# Altium schematic symbol library Ic%.SchLib: 452 symbols (part 8 of 12)
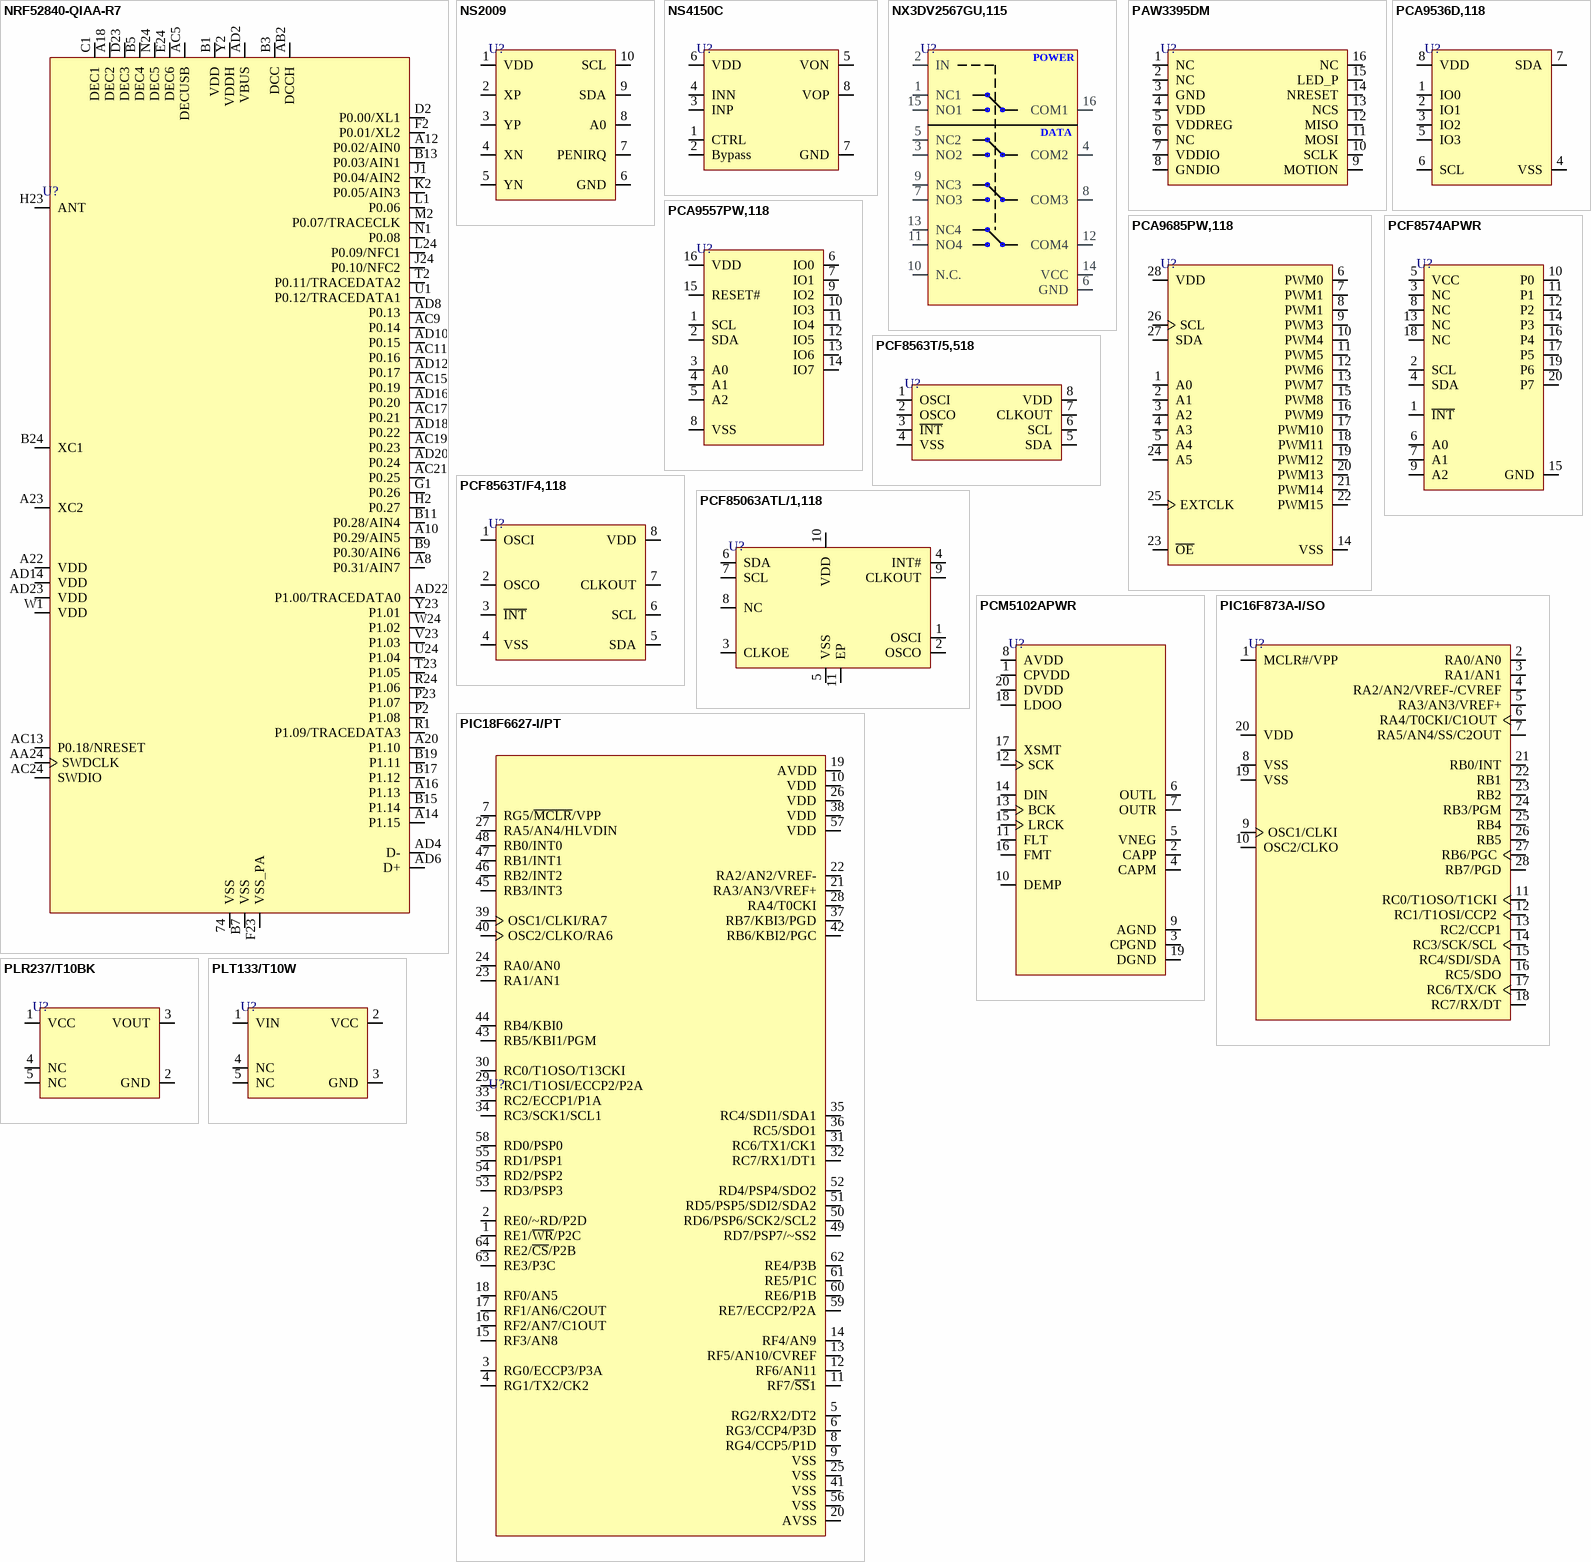
[diagram p30: symbols NRF52840-QIAA-R7 to PLT133/T10W]

## PIC18F6627-I/PT
designator U?
IC MCU 8BIT 96KB FLASH 64TQFP; Manufacturer: Microchip; Manufacturer Part Number: PIC18F6627-I/PT; Supplier: Digikey; Supplier Part Number: PIC18F6627-I/PT-ND; RoHS: Yes; Item Type: IC; Stock: 1660; Pricing: 1=11.3 (USD); ComponentLink1URL: https://datasheet.ciiva.com/7774/39646c-7774478.pdf?src-supplier=Element14; ComponentLink1Description: https://datasheet.ciiva.com/7774/39646c-7774478.pdf?src-supplier=Element14; ComponentLink2URL: https://datasheet.ciiva.com/7774/39646c-7774479.pdf?src-supplier=Element14; ComponentLink2Description: https://datasheet.ciiva.com/7774/39646c-7774479.pdf?src-supplier=Element14; ComponentLink3URL: https://datasheet.ciiva.com/9236/39646c-9236634.pdf?src-supplier=Avnet; ComponentLink3Description: https://datasheet.ciiva.com/9236/39646c-9236634.pdf?src-supplier=Avnet; ComponentLink4URL: https://datasheet.ciiva.com/6132/62310-6132869.pdf?src-supplier=Farnell; ComponentLink4Description: https://datasheet.ciiva.com/6132/62310-6132869.pdf?src-supplier=Farnell; ComponentLink5URL: https://datasheet.ciiva.com/6132/652299-6132870.pdf?src-supplier=Farnell; ComponentLink5Description: https://datasheet.ciiva.com/6132/652299-6132870.pdf?src-supplier=Farnell; ComponentLink6URL: https://datasheet.ciiva.com/41453/001084362-da-01-en-ic-pic-mcu-f-pic18f6627-i-pt-tqfp-64-mcp-41453830.pdf?src-supplier=Conrad; ComponentLink6Description: https://datasheet.ciiva.com/41453/001084362-da-01-en-ic-pic-mcu-f-pic18f6627-i-pt-tqfp-64-mcp-41453830.pdf?src-supplier=Conrad
footprint 64-TQFP (10x10)
pins: 1 RE1/~{WR}/P2C, 2 RE0/~RD/P2D, 3 RG0/ECCP3/P3A, 4 RG1/TX2/CK2, 5 RG2/RX2/DT2, 6 RG3/CCP4/P3D, 7 RG5/~{MCLR}/VPP, 8 RG4/CCP5/P1D, 9 VSS, 10 VDD, 11 RF7/~{SS}1, 12 RF6/AN11, 13 RF5/AN10/CVREF, 14 RF4/AN9, 15 RF3/AN8, 16 RF2/AN7/C1OUT, 17 RF1/AN6/C2OUT, 18 RF0/AN5, 19 AVDD, 20 AVSS, 21 RA3/AN3/VREF+, 22 RA2/AN2/VREF-, 23 RA1/AN1, 24 RA0/AN0, 25 VSS, 26 VDD, 27 RA5/AN4/HLVDIN, 28 RA4/T0CKI, 29 RC1/T1OSI/ECCP2/P2A, 30 RC0/T1OSO/T13CKI, 31 RC6/TX1/CK1, 32 RC7/RX1/DT1, 33 RC2/ECCP1/P1A, 34 RC3/SCK1/SCL1, 35 RC4/SDI1/SDA1, 36 RC5/SDO1, 37 RB7/KBI3/PGD, 38 VDD, 39 OSC1/CLKI/RA7, 40 OSC2/CLKO/RA6, 41 VSS, 42 RB6/KBI2/PGC, 43 RB5/KBI1/PGM, 44 RB4/KBI0, 45 RB3/INT3, 46 RB2/INT2, 47 RB1/INT1, 48 RB0/INT0, 49 RD7/PSP7/~SS2, 50 RD6/PSP6/SCK2/SCL2, 51 RD5/PSP5/SDI2/SDA2, 52 RD4/PSP4/SDO2, 53 RD3/PSP3, 54 RD2/PSP2, 55 RD1/PSP1, 56 VSS, 57 VDD, 58 RD0/PSP0, 59 RE7/ECCP2/P2A, 60 RE6/P1B, 61 RE5/P1C, 62 RE4/P3B, 63 RE3/P3C, 64 RE2/~{CS}/P2B

## PLR237/T10BK
designator U?
FIBER OPTIC RECEIVER IR; Manufacturer: Everlight; Manufacturer Part Number: PLR237/T10BK; Supplier: Digikey; Supplier Part Number: 1080-PLR237/T10BK-ND; RoHS: No; Item Type: FIBER OPTIC RECEIVER; Stock: 4654; Pricing: 1=3.86, 60=2.727, 120=2.2335, 540=1.88291, 1020=1.72708, 2040=1.65566, 5040=1.6232 (USD); LCSC Part Number: C17427482
footprint PLR237/T10BK
pins: 1 VCC, 2 GND, 3 VOUT, 4 NC, 5 NC

## PLT133/T10W
designator U?
TRANSMITTER FBR OPT IR PHOTOLINK; Manufacturer: Everlight; Manufacturer Part Number: PLT133/T10W; Item Type: IC; Data Rate: 16Mbps; Operating Supply Voltage: 5V; Wavelength: 660nm; Supply Current: 3mA; Supplier: Digikey; Supplier Part Number: 1080-1430-ND; RoHS: Yes; Stock: 13385; Pricing: 1=3.09, 60=2.0575, 120=1.58333, 540=1.4313, 1020=1.23002, 2040=1.16293, 5040=1.13609 (USD); Min Operating Temperature: -20°C; Max Operating Temperature: 70°C; Package Quantity: 500; Series: -; Lead Free: Lead Free; RoHS Compliant: Yes; ComponentLink1URL: http://components.arrow.com/part/dataview/47954421S9333883N2104?src-supplier=Arrow+Electronics; ComponentLink1Description: http://components.arrow.com/part/dataview/47954421S9333883N2104?src-supplier=Arrow+Electronics; ComponentLink2URL: http://www.everlight.com/file/ProductFile/PLT133-T10W.pdf?src-supplier=Digikey; ComponentLink2Description: http://www.everlight.com/file/ProductFile/PLT133-T10W.pdf?src-supplier=Digikey; ComponentLink3URL: http://www.everlight.com/index.php?option=com_k2&view=item&id=271:transmitter-plt-module&Itemid=264&lang=en&src-supplier=Mouser; ComponentLink3Description: http://www.everlight.com/index.php?option=com_k2&view=item&id=271:transmitter-plt-module&Itemid=264&lang=en&src-supplier=Mouser; ComponentLink4URL: http://www.everlight.com/datasheets/PLT133_T9_datasheet.pdf?src-supplier=Future+Electronics; ComponentLink4Description: http://www.everlight.com/datasheets/PLT133_T9_datasheet.pdf?src-supplier=Future+Electronics; LCSC Part Number: C2940206
footprint PLT133/T10W
pins: 1 VIN, 2 VCC, 3 GND, 4 NC, 5 NC

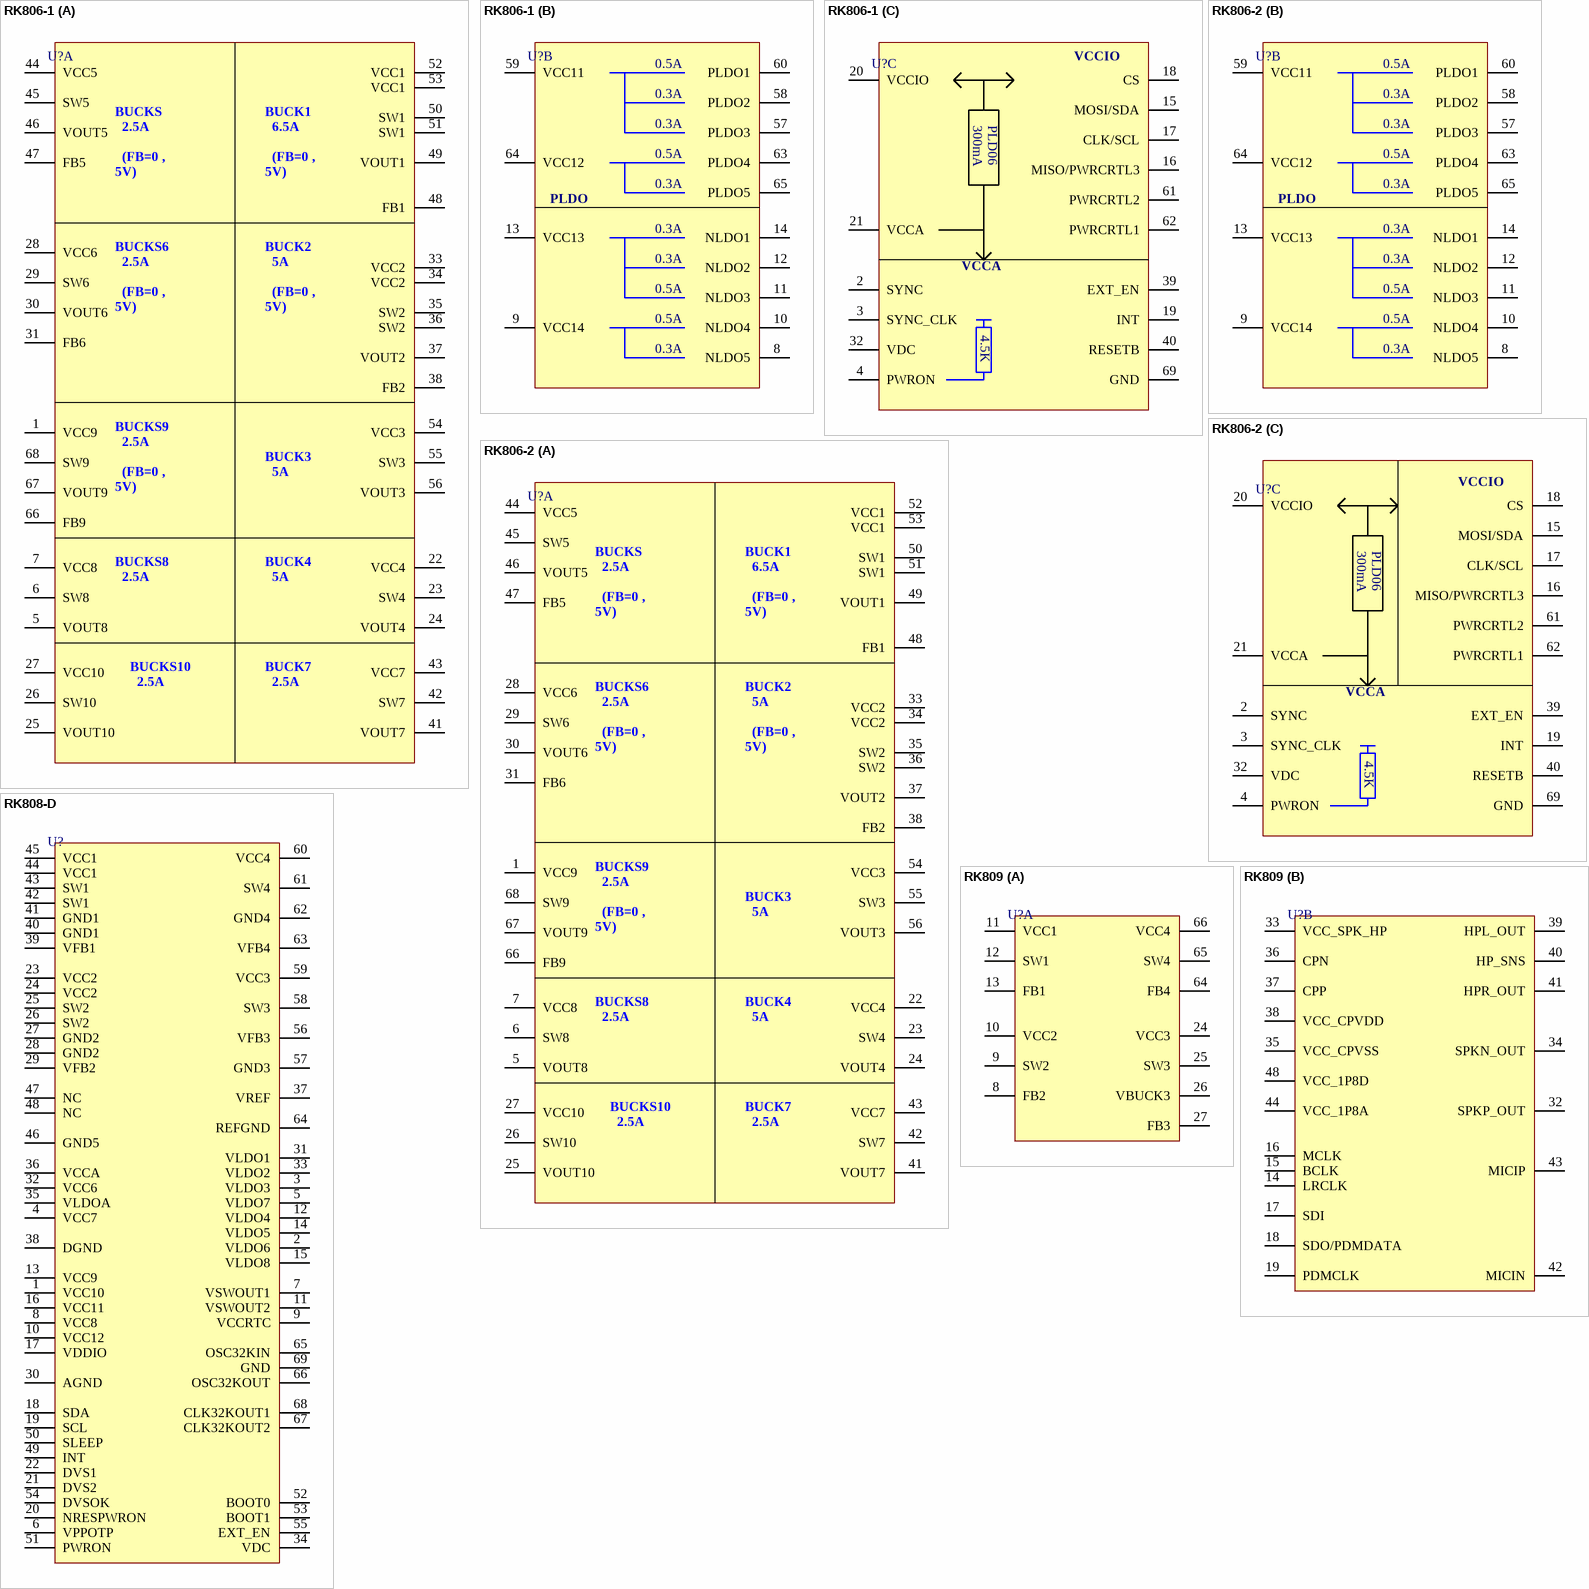
[diagram p15: symbols RK806-1 to RK809]

## RK806-1
designator U?
Power management integrated circuits; Manufacturer: ROCKCHIP; Manufacturer Part Number: RK806-1; Item Type: IC; Package: QFN68; LCSC Part Number: *; ComponentLink1Description: Rutronik; ComponentLink1URL: https://www.rutronik24.com/product/rockchip/rk806-1/17772765.html?emcs0=10&emcs1=null&emcs2=&emcs3=17772765
footprint 68-QFN-(7x7)
part A pins: 1 VCC9, 5 VOUT8, 6 SW8, 7 VCC8, 22 VCC4, 23 SW4, 24 VOUT4, 25 VOUT10, 26 SW10, 27 VCC10, 28 VCC6, 29 SW6, 30 VOUT6, 31 FB6, 33 VCC2, 34 VCC2, 35 SW2, 36 SW2, 37 VOUT2, 38 FB2, 41 VOUT7, 42 SW7, 43 VCC7, 44 VCC5, 45 SW5, 46 VOUT5, 47 FB5, 48 FB1, 49 VOUT1, 50 SW1, 51 SW1, 52 VCC1, 53 VCC1, 54 VCC3, 55 SW3, 56 VOUT3, 66 FB9, 67 VOUT9, 68 SW9
part B pins: 8 NLDO5, 9 VCC14, 10 NLDO4, 11 NLDO3, 12 NLDO2, 13 VCC13, 14 NLDO1, 57 PLDO3, 58 PLDO2, 59 VCC11, 60 PLDO1, 63 PLDO4, 64 VCC12, 65 PLDO5
part C pins: 2 SYNC, 3 SYNC_CLK, 4 PWRON, 15 MOSI/SDA, 16 MISO/PWRCRTL3, 17 CLK/SCL, 18 CS, 19 INT, 20 VCCIO, 21 VCCA, 32 VDC, 39 EXT_EN, 40 RESETB, 61 PWRCRTL2, 62 PWRCRTL1, 69 GND
part A text: BUCKS / 2.5A / (FB=0 , 5V); BUCK1 / 6.5A / (FB=0 , 5V); BUCKS6 / 2.5A / (FB=0 , 5V); BUCK2 / 5A / (FB=0 , 5V); BUCKS9 / 2.5A / (FB=0 , 5V); BUCK3 / 5A /; BUCKS8 / 2.5A /; BUCK4 / 5A; BUCKS10 / 2.5A; BUCK7 / 2.5A
part B text: 0.5A; 0.3A; PLDO
part C text: 300mA; PLD06; 4.5K

## RK806-2
designator U?
Power Management IC; Manufacturer: Rockchip; Manufacturer Part Number: RK806-2; Package: QFN-68 (7x7); LCSC Part Number: *; Item Type: IC; ComponentLink1Description: Rutronik; ComponentLink1URL: https://www.rutronik24.com/product/rockchip/rk806-1/17772765.html?emcs0=10&emcs1=null&emcs2=&emcs3=17772765
footprint 68-QFN-(7x7)
part A pins: 1 VCC9, 5 VOUT8, 6 SW8, 7 VCC8, 22 VCC4, 23 SW4, 24 VOUT4, 25 VOUT10, 26 SW10, 27 VCC10, 28 VCC6, 29 SW6, 30 VOUT6, 31 FB6, 33 VCC2, 34 VCC2, 35 SW2, 36 SW2, 37 VOUT2, 38 FB2, 41 VOUT7, 42 SW7, 43 VCC7, 44 VCC5, 45 SW5, 46 VOUT5, 47 FB5, 48 FB1, 49 VOUT1, 50 SW1, 51 SW1, 52 VCC1, 53 VCC1, 54 VCC3, 55 SW3, 56 VOUT3, 66 FB9, 67 VOUT9, 68 SW9
part B pins: 8 NLDO5, 9 VCC14, 10 NLDO4, 11 NLDO3, 12 NLDO2, 13 VCC13, 14 NLDO1, 57 PLDO3, 58 PLDO2, 59 VCC11, 60 PLDO1, 63 PLDO4, 64 VCC12, 65 PLDO5
part C pins: 2 SYNC, 3 SYNC_CLK, 4 PWRON, 15 MOSI/SDA, 16 MISO/PWRCRTL3, 17 CLK/SCL, 18 CS, 19 INT, 20 VCCIO, 21 VCCA, 32 VDC, 39 EXT_EN, 40 RESETB, 61 PWRCRTL2, 62 PWRCRTL1, 69 GND
part A text: BUCKS / 2.5A / (FB=0 , 5V); BUCK1 / 6.5A / (FB=0 , 5V); BUCKS6 / 2.5A / (FB=0 , 5V); BUCK2 / 5A / (FB=0 , 5V); BUCKS9 / 2.5A / (FB=0 , 5V); BUCK3 / 5A /; BUCKS8 / 2.5A /; BUCK4 / 5A; BUCKS10 / 2.5A; BUCK7 / 2.5A
part B text: 0.5A; 0.3A; PLDO
part C text: 300mA; PLD06; 4.5K

## RK808-D
designator U?
RK808 QFN68 K808 Power management chip; Manufacturer: Rockchip; Manufacturer Part Number: RK808-D; ComponentLink1Description: Aliexpress; ComponentLink1URL: https://www.aliexpress.com/item/4001077659208.html; Footprint: QFN68
footprint 68-QFN-(7x7)
pins: 1 VCC10, 2 VLDO6, 3 VLDO3, 4 VCC7, 5 VLDO7, 6 VPPOTP, 7 VSWOUT1, 8 VCC8, 9 VCCRTC, 10 VCC12, 11 VSWOUT2, 12 VLDO4, 13 VCC9, 14 VLDO5, 15 VLDO8, 16 VCC11, 17 VDDIO, 18 SDA, 19 SCL, 20 NRESPWRON, 21 DVS2, 22 DVS1, 23 VCC2, 24 VCC2, 25 SW2, 26 SW2, 27 GND2, 28 GND2, 29 VFB2, 30 AGND, 31 VLDO1, 32 VCC6, 33 VLDO2, 34 VDC, 35 VLDOA, 36 VCCA, 37 VREF, 38 DGND, 39 VFB1, 40 GND1, 41 GND1, 42 SW1, 43 SW1, 44 VCC1, 45 VCC1, 46 GND5, 47 NC, 48 NC, 49 INT, 50 SLEEP, 51 PWRON, 52 BOOT0, 53 BOOT1, 54 DVSOK, 55 EXT_EN, 56 VFB3, 57 GND3, 58 SW3, 59 VCC3, 60 VCC4, 61 SW4, 62 GND4, 63 VFB4, 64 REFGND, 65 OSC32KIN, 66 OSC32KOUT, 67 CLK32KOUT2, 68 CLK32KOUT1, 69 GND

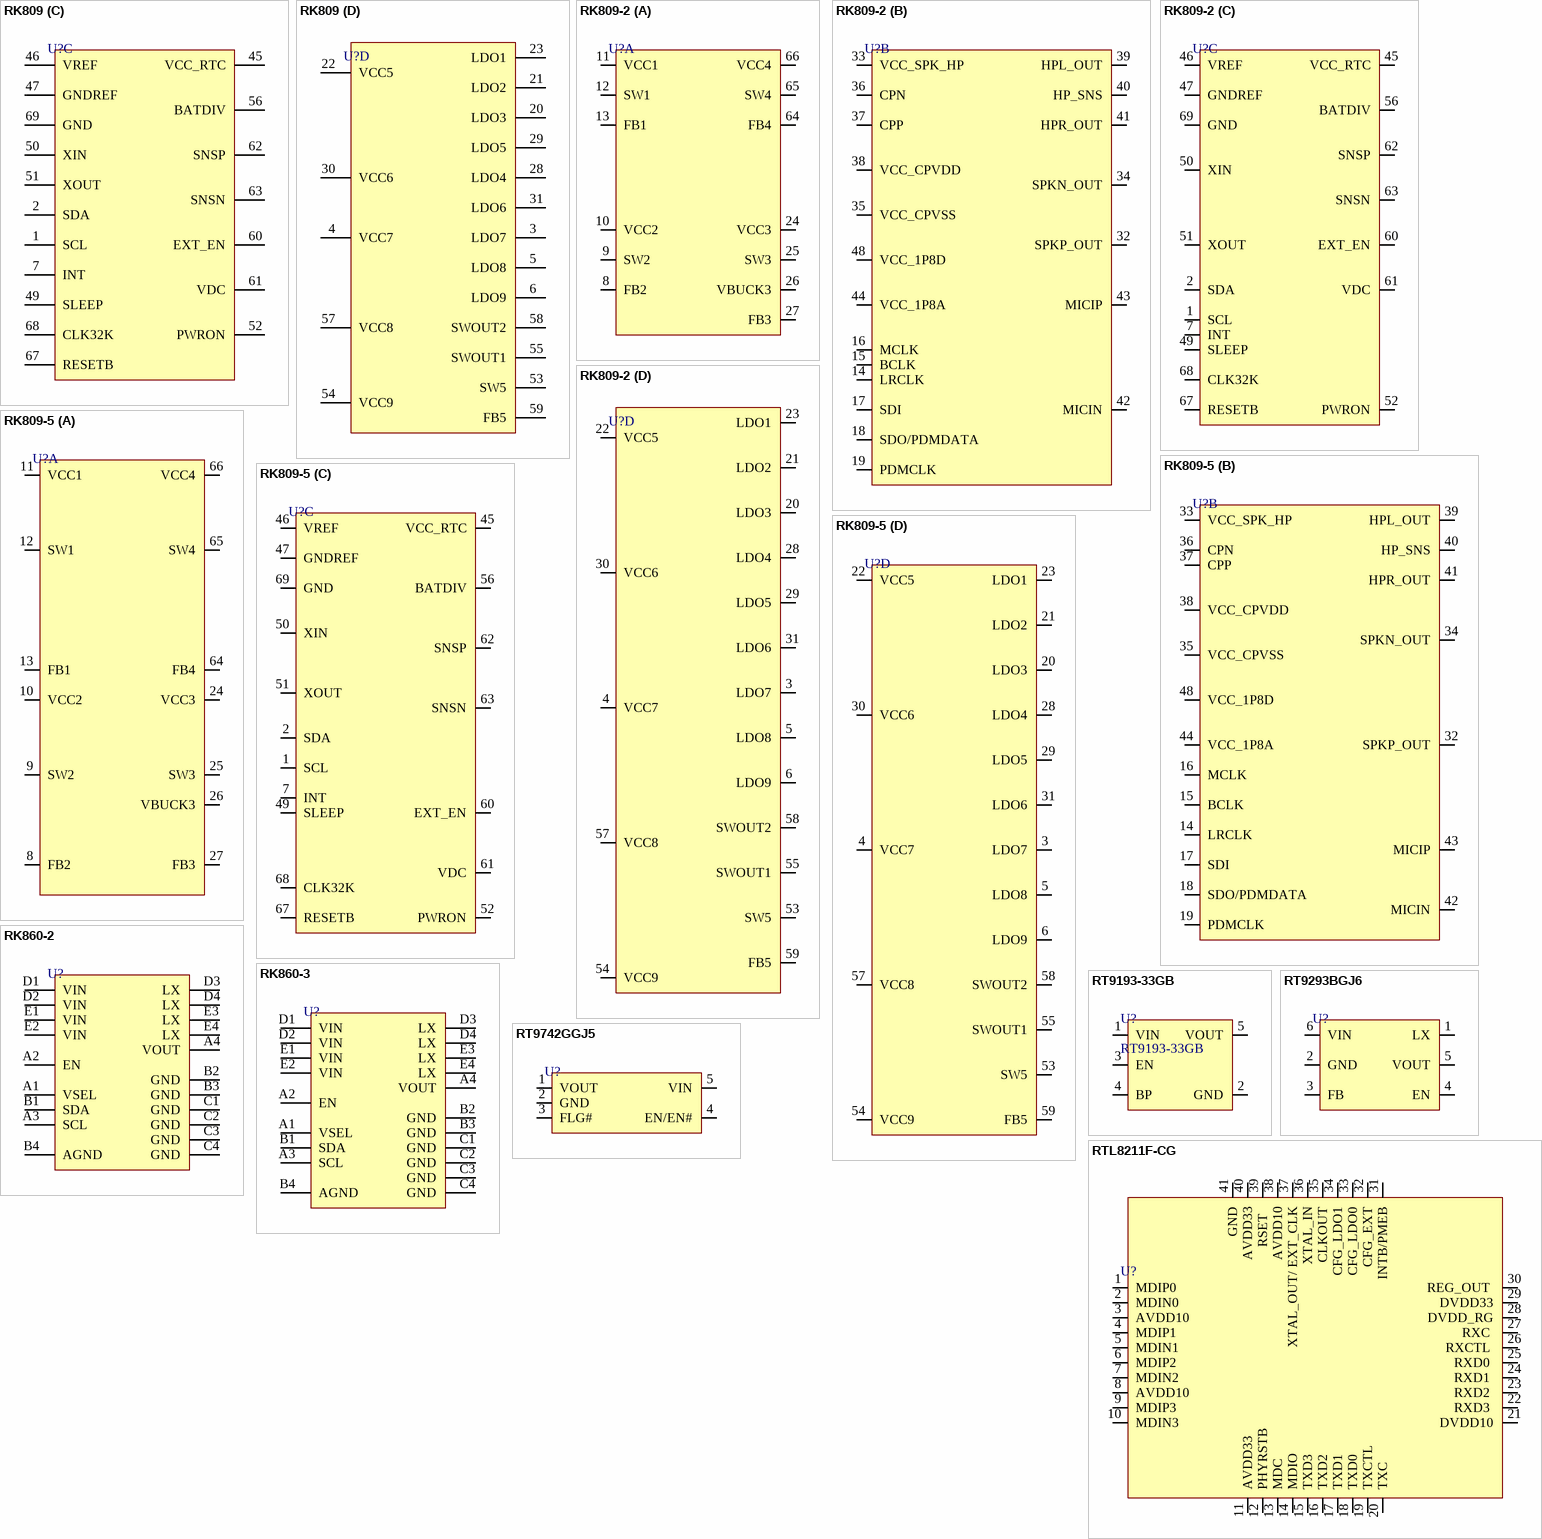
[diagram p16: symbols RK809 to RTL8211F-CG]

## RK809
designator U?
RK809-5 Power Management IC; Manufacturer: Rockchip; Manufacturer Part Number: RK809; Package: QFN68 (7×7); ComponentLink1Description: Aliexpress; ComponentLink1URL: https://www.aliexpress.com/item/1005003629885820.html?spm=a2g0o.productlist.0.0.2bfe8de0NJNeYV&algo_pvid=08d8084f-c015-4db9-be0c-c1b5412e8db5&algo_exp_id=08d8084f-c015-4db9-be0c-c1b5412e8db5-13&pdp_ext_f=%7B%22sku_id%22%3A%2212000026568725011%22%7D&pdp_npi=2%40dis%21USD%217.1%217.1%21%21%21%21%21%4021031a5516674805922344612ea9c5%2112000026568725011%21sea&curPageLogUid=5BHzR0rIdiJ1; Item Type: IC
footprint 68-QFN-(7x7)
part A pins: 8 FB2, 9 SW2, 10 VCC2, 11 VCC1, 12 SW1, 13 FB1, 24 VCC3, 25 SW3, 26 VBUCK3, 27 FB3, 64 FB4, 65 SW4, 66 VCC4
part B pins: 14 LRCLK, 15 BCLK, 16 MCLK, 17 SDI, 18 SDO/PDMDATA, 19 PDMCLK, 32 SPKP_OUT, 33 VCC_SPK_HP, 34 SPKN_OUT, 35 VCC_CPVSS, 36 CPN, 37 CPP, 38 VCC_CPVDD, 39 HPL_OUT, 40 HP_SNS, 41 HPR_OUT, 42 MICIN, 43 MICIP, 44 VCC_1P8A, 48 VCC_1P8D
part C pins: 1 SCL, 2 SDA, 7 INT, 45 VCC_RTC, 46 VREF, 47 GNDREF, 49 SLEEP, 50 XIN, 51 XOUT, 52 PWRON, 56 BATDIV, 60 EXT_EN, 61 VDC, 62 SNSP, 63 SNSN, 67 RESETB, 68 CLK32K, 69 GND
part D pins: 3 LDO7, 4 VCC7, 5 LDO8, 6 LDO9, 20 LDO3, 21 LDO2, 22 VCC5, 23 LDO1, 28 LDO4, 29 LDO5, 30 VCC6, 31 LDO6, 53 SW5, 54 VCC9, 55 SWOUT1, 57 VCC8, 58 SWOUT2, 59 FB5

## RK809-2
designator U?
QFN-68-EP(7x7) Power Management Specialized - PMIC ROHS; Manufacturer: Rockchip; Manufacturer Part Number: RK809-2; Item Type: IC; Package: QFN-68-EP(7x7); LCSC Part Number: C2940552; ComponentLink1Description: LCSC; ComponentLink1URL: https://www.lcsc.com/product-detail/Power-Management-Specialized-PMIC_Rockchip-RK809-2_C2940552.html
footprint 68-QFN-(7x7)
part A pins: 8 FB2, 9 SW2, 10 VCC2, 11 VCC1, 12 SW1, 13 FB1, 24 VCC3, 25 SW3, 26 VBUCK3, 27 FB3, 64 FB4, 65 SW4, 66 VCC4
part B pins: 14 LRCLK, 15 BCLK, 16 MCLK, 17 SDI, 18 SDO/PDMDATA, 19 PDMCLK, 32 SPKP_OUT, 33 VCC_SPK_HP, 34 SPKN_OUT, 35 VCC_CPVSS, 36 CPN, 37 CPP, 38 VCC_CPVDD, 39 HPL_OUT, 40 HP_SNS, 41 HPR_OUT, 42 MICIN, 43 MICIP, 44 VCC_1P8A, 48 VCC_1P8D
part C pins: 1 SCL, 2 SDA, 7 INT, 45 VCC_RTC, 46 VREF, 47 GNDREF, 49 SLEEP, 50 XIN, 51 XOUT, 52 PWRON, 56 BATDIV, 60 EXT_EN, 61 VDC, 62 SNSP, 63 SNSN, 67 RESETB, 68 CLK32K, 69 GND
part D pins: 3 LDO7, 4 VCC7, 5 LDO8, 6 LDO9, 20 LDO3, 21 LDO2, 22 VCC5, 23 LDO1, 28 LDO4, 29 LDO5, 30 VCC6, 31 LDO6, 53 SW5, 54 VCC9, 55 SWOUT1, 57 VCC8, 58 SWOUT2, 59 FB5

## RK809-5
designator U?
QFN-68-EP(7x7) Power Management Specialized - PMIC ROHS; Manufacturer: Rockchip; Manufacturer Part Number: RK809-5; Item Type: IC; Package: QFN-68-EP(7x7); LCSC Part Number: C2939628; ComponentLink1Description: LCSC; ComponentLink1URL: https://www.lcsc.com/product-detail/Power-Management-Specialized-PMIC_Rockchip-RK809-5_C2939628.html
footprint 68-QFN-(7x7)
part A pins: 8 FB2, 9 SW2, 10 VCC2, 11 VCC1, 12 SW1, 13 FB1, 24 VCC3, 25 SW3, 26 VBUCK3, 27 FB3, 64 FB4, 65 SW4, 66 VCC4
part B pins: 14 LRCLK, 15 BCLK, 16 MCLK, 17 SDI, 18 SDO/PDMDATA, 19 PDMCLK, 32 SPKP_OUT, 33 VCC_SPK_HP, 34 SPKN_OUT, 35 VCC_CPVSS, 36 CPN, 37 CPP, 38 VCC_CPVDD, 39 HPL_OUT, 40 HP_SNS, 41 HPR_OUT, 42 MICIN, 43 MICIP, 44 VCC_1P8A, 48 VCC_1P8D
part C pins: 1 SCL, 2 SDA, 7 INT, 45 VCC_RTC, 46 VREF, 47 GNDREF, 49 SLEEP, 50 XIN, 51 XOUT, 52 PWRON, 56 BATDIV, 60 EXT_EN, 61 VDC, 62 SNSP, 63 SNSN, 67 RESETB, 68 CLK32K, 69 GND
part D pins: 3 LDO7, 4 VCC7, 5 LDO8, 6 LDO9, 20 LDO3, 21 LDO2, 22 VCC5, 23 LDO1, 28 LDO4, 29 LDO5, 30 VCC6, 31 LDO6, 53 SW5, 54 VCC9, 55 SWOUT1, 57 VCC8, 58 SWOUT2, 59 FB5

## RK860-2
designator U?
Power Management IC; Manufacturer: Rockchip; Manufacturer Part Number: RK-860; Package: WLCSP20; LCSC Part Number: *; Item Type: IC; ComponentLink1Description: Rutronik; ComponentLink1URL: https://www.rutronik24.com/product/rockchip/rk860-2/18760320.html?emcs0=10&emcs1=null&emcs2=&emcs3=18760320
footprint WLCSP-20 (2.05x1.65) 0.4mm
pins: A1 VSEL, A2 EN, A3 SCL, A4 VOUT, B1 SDA, B2 GND, B3 GND, B4 AGND, C1 GND, C2 GND, C3 GND, C4 GND, D1 VIN, D2 VIN, D3 LX, D4 LX, E1 VIN, E2 VIN, E3 LX, E4 LX

## RK860-3
designator U?
Power Management IC; Manufacturer: Rokchip; Manufacturer Part Number: RK860-3; Package: WLCSP-20; LCSC Part Number: *; ComponentLink1Description: LCSC; ComponentLink1URL: https://www.rutronik24.com/product/rockchip/rk860-3/18760321.html?emcs0=10&emcs1=null&emcs2=&emcs3=18760321; Item Type: IC
footprint WLCSP-20 (2.05x1.65) 0.4mm
pins: A1 VSEL, A2 EN, A3 SCL, A4 VOUT, B1 SDA, B2 GND, B3 GND, B4 AGND, C1 GND, C2 GND, C3 GND, C4 GND, D1 VIN, D2 VIN, D3 LX, D4 LX, E1 VIN, E2 VIN, E3 LX, E4 LX

## RT9193-33GB
designator U?
IC REG LDO 3.3V 0.3A SOT23-5; Manufacturer: Richtek; Supplier: Digi-Key; Supplier Part Number: 1028-1014-1-ND; Manufacturer Part Number: RT9193-33GB; RoHS: Yes; Category: Voltage Regulators - Linear; Stock: 7748; Pricing: 1=0.53, 10=0.454, 25=0.424, 100=0.3394, 250=0.31512, 500=0.26664, 1000=0.20604 (USD); ComponentLink1URL: https://datasheet.ciiva.com/2046/3d3futf-83fb3frfm5mtkzlte2lnbkzg3d3d3f3d-2046896.pdf?src-supplier=Digi-Key; ComponentLink1Description: https://datasheet.ciiva.com/2046/3d3futf-83fb3frfm5mtkzlte2lnbkzg3d3d3f3d-2046896.pdf?src-supplier=Digi-Key; ComponentLink2URL: https://datasheet.ciiva.com/28652/1782157-28652989.pdf?src-supplier=Element14; ComponentLink2Description: https://datasheet.ciiva.com/28652/1782157-28652989.pdf?src-supplier=Element14
footprint SOT-23-5
pins: 1 VIN, 2 GND, 3 EN, 4 BP, 5 VOUT

## RT9293BGJ6
designator U?
IC LED DRVR RGLTR PWM TSOT23-6; Manufacturer: Richtek; Manufacturer Part Number: RT9293BGJ6; Number of Outputs: 1; Frequency: 1MHz; Output Current: 20mA; Min Input Voltage: 2.5V; Max Supply Voltage: 5.5V; Output Current per Channel: 1.2A; Topology: Boost; Supplier: Digikey; Supplier Part Number: RT9293BGJ6-ND; RoHS: Yes; Category: LED Drivers; Mounting Technology: Surface Mount; Case/Package: SOT-23-6; Pins: 23; Min Operating Temperature: -40°C; Max Operating Temperature: 85°C; Packaging: Tape and Reel; Switching Frequency: 1MHz; Dimming: PWM; Series: -; Lead Free: Lead Free; RoHS Compliant: Yes; Reach SVHC Compliant: Unknown; ComponentLink1URL: https://datasheet.ciiva.com/28625/1782145-28625981.pdf?src-supplier=Element14; ComponentLink1Description: https://datasheet.ciiva.com/28625/1782145-28625981.pdf?src-supplier=Element14; ComponentLink2URL: https://datasheet.ciiva.com/18569/3d3futf-83fb3frfm5mjkzltaxlnbkzg3d3d3f3d-18569117.pdf?src-supplier=Digikey; ComponentLink2Description: https://datasheet.ciiva.com/18569/3d3futf-83fb3frfm5mjkzltaxlnbkzg3d3d3f3d-18569117.pdf?src-supplier=Digikey; LCSC Part Number: C36462; Item Type: IC
footprint SOT-23-6
pins: 1 LX, 2 GND, 3 FB, 4 EN, 5 VOUT, 6 VIN

## RT9742GGJ5
designator U?
IC PWR SWTCH N-CHAN 1:1 TSOT23-5; Manufacturer: Richtek; Manufacturer Part Number: RT9742GGJ5; Number of Outputs: 1; Interface: On/Off; Max Output current: 1A; Fault Protection: Over Temperature,Reverse Current; Output Configuration: High Side; On-State Resistance: 70mR; Supplier: Digikey; LCSC Part Number: C250547; RoHS: Yes; Item Type: IC; Stock: 4439; Pricing: 1=2.13, 10=1.33, 25=1.1204, 100=0.8834, 250=0.76692, 500=0.69524, 1000=0.63519 (USD); Case/Package: SOT-23-5; Pins: 23; Min Operating Temperature: -40°C; Max Operating Temperature: 85°C; Packaging: Cut Tape; Series: -; RoHS Compliant: Yes; Reach SVHC Compliant: No; ComponentLink1URL: http://www.farnell.com/datasheets/2045592.pdf?src-supplier=Farnell; ComponentLink1Description: http://www.farnell.com/datasheets/2045592.pdf?src-supplier=Farnell; ComponentLink2URL: http://www.richtek.com/assets/product_file/RT9742/DS9742-03.pdf?src-supplier=Digikey; ComponentLink2Description: http://www.richtek.com/assets/product_file/RT9742/DS9742-03.pdf?src-supplier=Digikey; ComponentLink3URL: http://www.farnell.com/datasheets/2045592.pdf?src-supplier=Element14; ComponentLink3Description: http://www.farnell.com/datasheets/2045592.pdf?src-supplier=Element14
footprint TSOT-23-5
pins: 1 VOUT, 2 GND, 3 FLG#, 4 EN/EN#, 5 VIN

## RTL8211F-CG
designator U?
WQFN-40-EP(5x5) Ethernet ICs ROHS; Manufacturer: Realtek Semicon; Manufacturer Part Number: RTL8211F-CG; Item Type: IC; Package: WQFN-40-EP(5x5); LCSC Part Number: C187932; ComponentLink1Description: LCSC; ComponentLink1URL: https://www.lcsc.com/product-detail/Ethernet-ICs_Realtek-Semicon-RTL8211F-CG_C187932.html
footprint WQFN-40-EP(5x5)
pins: 1 MDIP0, 2 MDIN0, 3 AVDD10, 4 MDIP1, 5 MDIN1, 6 MDIP2, 7 MDIN2, 8 AVDD10, 9 MDIP3, 10 MDIN3, 11 AVDD33, 12 PHYRSTB, 13 MDC, 14 MDIO, 15 TXD3 , 16 TXD2 , 17 TXD1 , 18 TXD0 , 19 TXCTL , 20 TXC , 21 DVDD10, 22 RXD3 , 23 RXD2 , 24 RXD1 , 25 RXD0 , 26 RXCTL , 27 RXC , 28 DVDD_RG, 29 DVDD33, 30 REG_OUT , 31 INTB/PMEB, 32 CFG_EXT, 33 CFG_LDO0, 34 CFG_LDO1, 35 CLKOUT, 36 XTAL_IN, 37 XTAL_OUT/ EXT_CLK, 38 AVDD10, 39 RSET  , 40 AVDD33, 41 GND

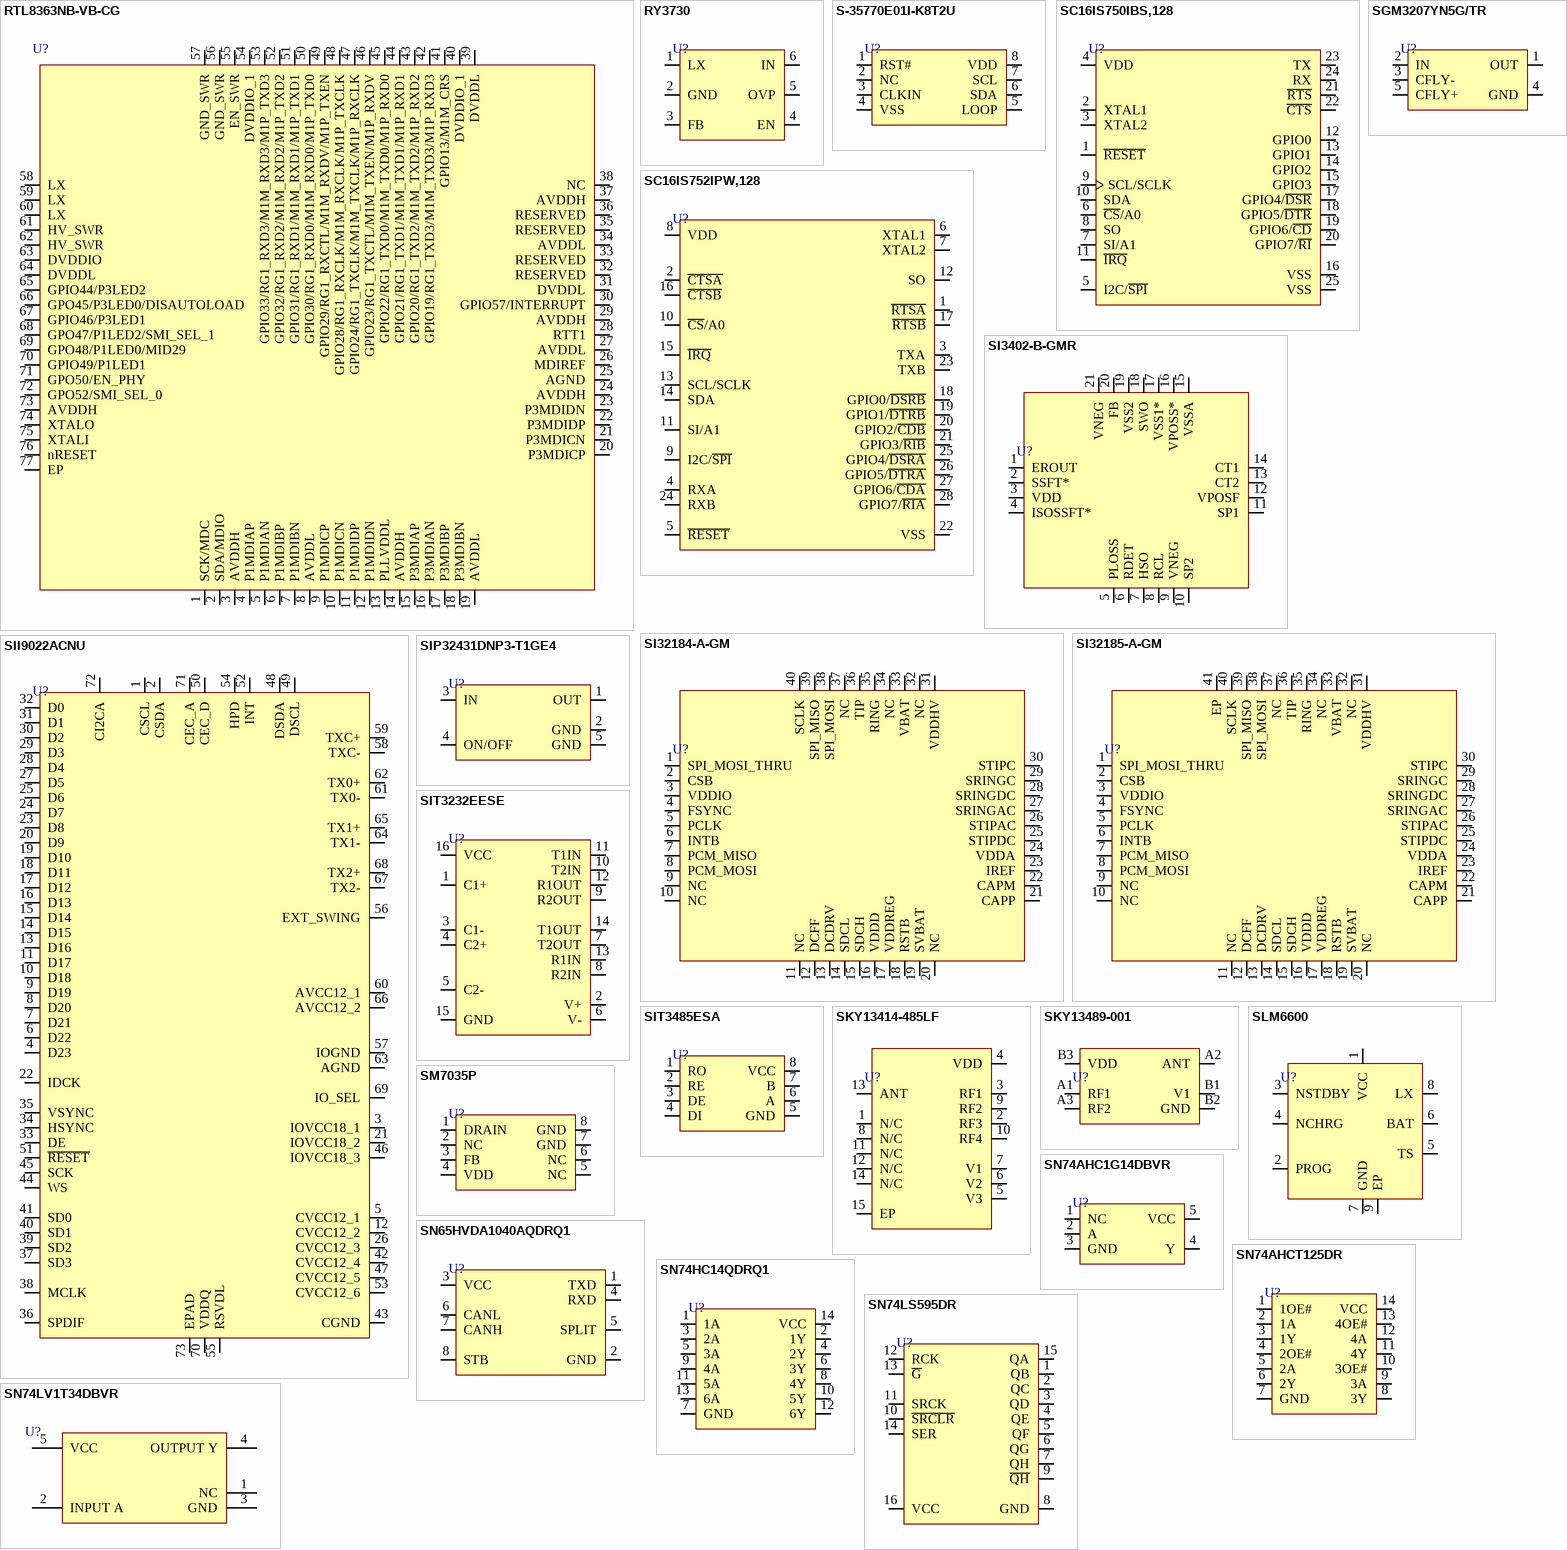
[diagram p17: symbols RTL8363NB-VB-CG to SN74LV1T34DBVR]

## RTL8363NB-VB-CG
designator U?
QFN-76 Ethernet Transceivers ROHS; Manufacturer: Realtek Semicon; Manufacturer Part Number: RTL8363NB-VB-CG; Item Type: IC; Package: QFN-76; LCSC Part Number: C2835942; ComponentLink1Description: LCSC; ComponentLink1URL: https://www.lcsc.com/product-detail/Ethernet-Transceivers_Realtek-Semicon-RTL8363NB-VB-CG_C2835942.html
footprint QFN-76
pins: 1 SCK/MDC, 2 SDA/MDIO, 3 AVDDH, 4 P1MDIAP, 5 P1MDIAN, 6 P1MDIBP, 7 P1MDIBN, 8 AVDDL, 9 P1MDICP, 10 P1MDICN, 11 P1MDIDP, 12 P1MDIDN, 13 PLLVDDL, 14 AVDDH, 15 P3MDIAP, 16 P3MDIAN, 17 P3MDIBP, 18 P3MDIBN, 19 AVDDL, 20 P3MDICP, 21 P3MDICN, 22 P3MDIDP, 23 P3MDIDN, 24 AVDDH, 25 AGND, 26 MDIREF, 27 AVDDL, 28 RTT1, 29 AVDDH, 30 GPIO57/INTERRUPT, 31 DVDDL, 32 RESERVED, 33 RESERVED, 34 AVDDL, 35 RESERVED, 36 RESERVED, 37 AVDDH, 38 NC, 39 DVDDL, 40 DVDDIO_1, 41 GPIO13/M1M_CRS, 42 GPIO19/RG1_TXD3/M1M_TXD3/M1P_RXD3, 43 GPIO20/RG1_TXD2/M1M_TXD2/M1P_RXD2, 44 GPIO21/RG1_TXD1/M1M_TXD1/M1P_RXD1, 45 GPIO22/RG1_TXD0/M1M_TXD0/M1P_RXD0, 46 GPIO23/RG1_TXCTL/M1M_TXEN/M1P_RXDV, 47 GPIO24/RG1_TXCLK/M1M_TXCLK/M1P_RXCLK, 48 GPIO28/RG1_RXCLK/M1M_RXCLK/M1P_TXCLK, 49 GPIO29/RG1_RXCTL/M1M_RXDV/M1P_TXEN, 50 GPIO30/RG1_RXD0/M1M_RXD0/M1P_TXD0, 51 GPIO31/RG1_RXD1/M1M_RXD1/M1P_TXD1, 52 GPIO32/RG1_RXD2/M1M_RXD2/M1P_TXD2, 53 GPIO33/RG1_RXD3/M1M_RXD3/M1P_TXD3, 54 DVDDIO_1, 55 EN_SWR, 56 GND_SWR, 57 GND_SWR, 58 LX, 59 LX, 60 LX, 61 HV_SWR, 62 HV_SWR, 63 DVDDIO, 64 DVDDL, 65 GPIO44/P3LED2, 66 GPO45/P3LED0/DISAUTOLOAD, 67 GPIO46/P3LED1, 68 GPO47/P1LED2/SMI_SEL_1, 69 GPO48/P1LED0/MID29, 70 GPIO49/P1LED1, 71 GPO50/EN_PHY, 72 GPO52/SMI_SEL_0, 73 AVDDH, 74 XTALO, 75 XTALI, 76 nRESET, 77 EP

## RY3730
designator U?
SOT-23-6 LED Drivers ROHS; Manufacturer: RYCHIP Semiconductor Inc.; Manufacturer Part Number: RY3730; Item Type: IC; Package: SOT-23-6; LCSC Part Number: C370887; ComponentLink1Description: LCSC; ComponentLink1URL: https://www.lcsc.com/product-detail/LED-Drivers_RYCHIP-Semiconductor-Inc-RY3730_C370887.html
footprint SOT-23-6
pins: 1 LX, 2 GND, 3 FB, 4 EN, 5 OVP, 6 IN

## S-35770E01I-K8T2U
designator U?
IC OSC 2-WIRE TIMER 1MHZ 8TMSOP; Manufacturer: ABLIC; Manufacturer Part Number: S-35770E01I-K8T2U; Supplier: Digikey; LCSC Part Number: C2666930; RoHS: Yes; Item Type: IC; Stock: 2912; Pricing: 1=7.55, 10=5.036, 25=4.3812, 100=3.6411, 250=3.27772, 500=3.13 (USD)
footprint 8-TMSOP
pins: 1 RST#, 2 NC, 3 CLKIN, 4 VSS, 5 LOOP, 6 SDA, 7 SCL, 8 VDD

## SC16IS750IBS,128
designator U?
IC UART I2C/SPI 24-HVQFN; Manufacturer: NXP Semiconductors; Manufacturer Part Number: SC16IS750IBS,128; Interface: 39,40,1519,1532Interface; Supplier: Future Electronics; LCSC Part Number: C2651891; RoHS: Yes; Item Type: IC; Stock: 1500; Pricing: 1500=1.65 (USD); Contact Plating: 157ConductorMaterial; Height: 1mm; Lead Free: 5697LeadFree; ComponentLink1URL: https://datasheet.ciiva.com/15150/getdatasheetpartid-449890-15150365.pdf?src-supplier=Verical; ComponentLink1Description: https://datasheet.ciiva.com/15150/getdatasheetpartid-449890-15150365.pdf?src-supplier=Verical; ComponentLink2URL: https://datasheet.ciiva.com/1787/sc16is740-750-760-1787404.pdf?src-supplier=Digikey; ComponentLink2Description: https://datasheet.ciiva.com/1787/sc16is740-750-760-1787404.pdf?src-supplier=Digikey
footprint HVQFN-24-EP(4x4)
pins: 1 ~{RESET}, 2 XTAL1, 3 XTAL2, 4 VDD, 5 I2C/~{SPI}, 6 ~{CS}/A0, 7 SI/A1, 8 SO, 9 SCL/SCLK, 10 SDA, 11 ~{IRQ}, 12 GPIO0, 13 GPIO1, 14 GPIO2, 15 GPIO3, 16 VSS, 17 GPIO4/~{DSR}, 18 GPIO5/~{DTR}, 19 GPIO6/~{CD}, 20 GPIO7/~{RI}, 21 ~{RTS}, 22 ~{CTS}, 23 TX, 24 RX, 25 VSS

## SC16IS752IPW,128
designator U?
IC DUAL UART 64BYTE 28TSSOP; Manufacturer: NXP Semiconductors; Manufacturer Part Number: SC16IS752IPW,128; Data Rate: 5Mbps; Number of Channels: 2; Max Supply Voltage: 3.6V; Min Supply Voltage: 2.3V; Operating Supply Voltage: 3.3V; Interface: I2C,SPI,UART; Operating Supply Current: 2mA; Supply Current: 6mA; Supplier: Future Electronics; LCSC Part Number: C57156; RoHS: Yes; Item Type: IC; Stock: 30000; Pricing: 2500=3.65 (USD); Mounting Technology: Surface Mount; Case/Package: TSSOP; Pins: 28; Min Operating Temperature: -40°C; Max Operating Temperature: 95°C; Packaging: Tape and Reel; Package Quantity: 2500; Max Supply Current: 2mA; Series: -; Channels: 2; Nominal Supply Voltage: 3.6V; Radiation Hardening: No; Lead Free: Lead Free; RoHS Compliant: Yes; ComponentLink1URL: https://datasheet.ciiva.com/11213/sc16is752-sc16is762-11213227.pdf?src-supplier=Avnet; ComponentLink1Description: https://datasheet.ciiva.com/11213/sc16is752-sc16is762-11213227.pdf?src-supplier=Avnet; ComponentLink2URL: https://datasheet.ciiva.com/16485/sc16is752-sc16is762-16485125.pdf?src-supplier=Future+Electronics; ComponentLink2Description: https://datasheet.ciiva.com/16485/sc16is752-sc16is762-16485125.pdf?src-supplier=Future+Electronics; ComponentLink3URL: https://datasheet.ciiva.com/1787/sc16is752-sc16is762-1787430.pdf?src-supplier=Digikey; ComponentLink3Description: https://datasheet.ciiva.com/1787/sc16is752-sc16is762-1787430.pdf?src-supplier=Digikey
footprint TSSOP-28
pins: 1 ~{RTSA}, 2 ~{CTSA}, 3 TXA, 4 RXA, 5 ~{RESET}, 6 XTAL1, 7 XTAL2, 8 VDD, 9 I2C/~{SPI}, 10 ~{CS}/A0, 11 SI/A1, 12 SO, 13 SCL/SCLK, 14 SDA, 15 ~{IRQ}, 16 ~{CTSB}, 17 ~{RTSB}, 18 GPIO0/~{DSRB}, 19 GPIO1/~{DTRB}, 20 GPIO2/~{CDB}, 21 GPIO3/~{RIB}, 22 VSS, 23 TXB, 24 RXB, 25 GPIO4/~{DSRA}, 26 GPIO5/~{DTRA}, 27 GPIO6/~{CDA}, 28 GPIO7/~{RIA}

## SGM3207YN5G/TR
designator U?
NO Charge pump 1 -5.5V~-1.4V 1.4V~5.5V 60mA 19kHz SOT-23-5 DC-DC Converters ROHS; Manufacturer: SG Micro; Manufacturer Part Number: SGM3207YN5G/TR; Item Type: IC; Supplier 1: Avnet; RoHS: No; Category: Uncategorized; Pricing 1: 3000=0.38750, 6000=0.36250, 12000=0.33750, 18000=0.32500, 24000=0.31250, 30000=0.31250, 300000=0.30500 (USD); LCSC Part Number: C80403; Supplier Part Number 1: SGM3207YN5G/TR
footprint SOT-23-5
pins: 1 OUT, 2 IN, 3 CFLY-, 4 GND, 5 CFLY+

## SI3402-B-GMR
designator U?
IC POE CNTRL 1 CHANNEL 20QFN; Manufacturer: Skyworks Solutions; Manufacturer Part Number: SI3402-B-GMR; Supplier: Digikey; Supplier Part Number: 336-4152-1-ND; RoHS: No; Item Type: IC; Stock: 11442; Pricing: 1=2.8, 10=2.516, 25=2.3736, 100=2.0222, 250=1.8988, 500=1.66144, 1000=1.37663 (USD)
footprint 20-QFN (5x5)
pins: 1 EROUT, 2 SSFT*, 3 VDD, 4 ISOSSFT*, 5 PLOSS, 6 RDET, 7 HSO, 8 RCL, 9 VNEG, 10 SP2, 11 SP1, 12 VPOSF, 13 CT2, 14 CT1, 15 VSSA, 16 VPOSS*, 17 VSS1*, 18 SWO, 19 VSS2, 20 FB, 21 VNEG

## SI32184-A-GM
designator U?
IC TELECOM INTERFACE 40QFN; Manufacturer: Skyworks Solutions Inc.; Manufacturer Part Number: SI32184-A-GM; Package: 40-QFN (6x6); Item Type: IC
footprint 40-QFN (6x6)
pins: 1 SPI_MOSI_THRU, 2 CSB, 3 VDDIO, 4 FSYNC, 5 PCLK, 6 INTB, 7 PCM_MISO, 8 PCM_MOSI, 9 NC, 10 NC, 11 NC, 12 DCFF, 13 DCDRV, 14 SDCL, 15 SDCH, 16 VDDD, 17 VDDREG, 18 RSTB, 19 SVBAT, 20 NC, 21 CAPP, 22 CAPM, 23 IREF, 24 VDDA, 25 STIPDC, 26 STIPAC, 27 SRINGAC, 28 SRINGDC, 29 SRINGC, 30 STIPC, 31 VDDHV, 32 NC, 33 VBAT, 34 NC, 35 RING, 36 TIP, 37 NC, 38 SPI_MOSI, 39 SPI_MISO, 40 SCLK

## SI32185-A-GM
designator U?
IC TELECOM INTERFACE 40QFN; Manufacturer: Skyworks Solutions; Manufacturer Part Number: SI32185-A-GM; Supplier: Digikey; Supplier Part Number: 336-5396-ND; RoHS: No; Category: Uncategorized; Stock: 2912; Pricing: 1=7.24, 10=6.536, 25=6.2324, 80=5.41138, 364=5.16816, 728=4.71216, 1092=4.10414 (USD); Item Type: IC
footprint 40-QFN (6x6)
pins: 1 SPI_MOSI_THRU, 2 CSB, 3 VDDIO, 4 FSYNC, 5 PCLK, 6 INTB, 7 PCM_MISO, 8 PCM_MOSI, 9 NC, 10 NC, 11 NC, 12 DCFF, 13 DCDRV, 14 SDCL, 15 SDCH, 16 VDDD, 17 VDDREG, 18 RSTB, 19 SVBAT, 20 NC, 21 CAPP, 22 CAPM, 23 IREF, 24 VDDA, 25 STIPDC, 26 STIPAC, 27 SRINGAC, 28 SRINGDC, 29 SRINGC, 30 STIPC, 31 VDDHV, 32 NC, 33 VBAT, 34 NC, 35 RING, 36 TIP, 37 NC, 38 SPI_MOSI, 39 SPI_MISO, 40 SCLK, 41 EP

## SII9022ACNU
designator U?
24-BIT RGB INPUT HDMI 1.4A TRANS; Manufacturer: Lattice Semiconductor; Manufacturer Part Number: SII9022ACNU; Item Type: IC; Supplier: Arrow Electronics; Supplier Part Number: SII9022ACNU; RoHS: No; Stock: 168; Pricing: 168=5.196 (USD); LCSC Part Number: C369565
footprint QFN-72-EP(10x10)
pins: 1 CSCL, 2 CSDA, 3 IOVCC18_1, 4 D23, 5 CVCC12_1, 6 D22, 7 D21, 8 D20, 9 D19, 10 D18, 11 D17, 12 CVCC12_2, 13 D16, 14 D15, 15 D14, 16 D13, 17 D12, 18 D11, 19 D10, 20 D9, 21 IOVCC18_2, 22 IDCK, 23 D8, 24 D7, 25 D6, 26 CVCC12_3, 27 D5, 28 D4, 29 D3, 30 D2, 31 D1, 32 D0, 33 DE, 34 HSYNC, 35 VSYNC, 36 SPDIF, 37 SD3, 38 MCLK, 39 SD2, 40 SD1, 41 SD0, 42 CVCC12_4, 43 CGND, 44 WS, 45 SCK, 46 IOVCC18_3, 47 CVCC12_5, 48 DSDA, 49 DSCL, 50 CEC_D, 51 ~{RESET}, 52 INT, 53 CVCC12_6, 54 HPD, 55 RSVDL, 56 EXT_SWING, 57 IOGND, 58 TXC-, 59 TXC+, 60 AVCC12_1, 61 TX0-, 62 TX0+, 63 AGND, 64 TX1-, 65 TX1+, 66 AVCC12_2, 67 TX2-, 68 TX2+, 69 IO_SEL, 70 VDDQ, 71 CEC_A, 72 CI2CA, 73 EPAD

## SIP32431DNP3-T1GE4
designator U?
IC PWR SWITCH P-CHAN 1:1 4TDFN; Manufacturer: Vishay Siliconix; Manufacturer Part Number: SIP32431DNP3-T1GE4; Output Current: 1A; Number of Outputs: 1; Max Power Dissipation: 324mW; Max Supply Voltage: 5.5V; Min Supply Voltage: 1.1V; Interface: On/Off; Max Output current: 1.4A; Fault Protection: Reverse Current; Output Configuration: High Side; Number of Channels: 1NUMBER; Value: 520mR; Rise Time: 140us; Supplier: Mouser; LCSC Part Number: C727398; RoHS: Yes; Item Type: IC; Stock: 50126; Pricing: 1=0.66, 10=0.564, 50=0.564, 100=0.386, 1000=0.304, 10000=0.229 (USD); Mounting Technology: Surface Mount; Pins: 4; Weight: 0.001764oz; Min Operating Temperature: -40°C; Max Operating Temperature: 85°C; Packaging: Tape and Reel; Package Quantity: 3000; Power Dissipation: 324mW; Series: -; Nominal Supply Voltage: 5.5V; Height: 600um; Radiation Hardening: No; Lead Free: Lead Free; RoHS Compliant: Yes; ComponentLink1URL: https://datasheet.ciiva.com/15109/getdatasheetpartid-704627-15109219.pdf?src-supplier=Verical; ComponentLink1Description: https://datasheet.ciiva.com/15109/getdatasheetpartid-704627-15109219.pdf?src-supplier=Verical; ComponentLink2URL: https://datasheet.ciiva.com/1954/sip32431-1954885.pdf?src-supplier=Digikey; ComponentLink2Description: https://datasheet.ciiva.com/1954/sip32431-1954885.pdf?src-supplier=Digikey
footprint TDFN-4-EP(1.2x1.6)
pins: 1 OUT, 2 GND, 3 IN, 4 ON/OFF, 5 GND

## SIT3232EESE
designator U?
120Kbps transceiver 1/1 SOP-16 RS232 ICs ROHS; Manufacturer: SIT; Manufacturer Part Number: SIT3232EESE; Item Type: IC; Package: SOP-16; LCSC Part Number: C313017; ComponentLink1Description: LCSC; ComponentLink1URL: https://www.lcsc.com/product-detail/RS-span-style-background-color-ff0-232-span-ICs_span-style-background-color-ff0-SIT-span-SIT3232EESE_C313017.html
footprint SOP-16
pins: 1 C1+, 2 V+, 3 C1-, 4 C2+, 5 C2-, 6 V-, 7 T2OUT, 8 R2IN, 9 R2OUT, 10 T2IN, 11 T1IN, 12 R1OUT, 13 R1IN, 14 T1OUT, 15 GND, 16 VCC

## SIT3485ESA
designator U?
transceiver 12Mbps 1/1 SOP-8 RS-485/RS-422 ICs ROHS; Manufacturer: SIT; Manufacturer Part Number: SIT3485ESA; Item Type: IC; Package: SOP-8; LCSC Part Number: C313015; ComponentLink1Description: LCSC; ComponentLink1URL: https://www.lcsc.com/product-detail/RS-span-style-background-color-ff0-485-span-RS-422-ICs_span-style-background-color-ff0-SIT-span-SIT3485ESA_C313015.html
footprint SOP-8
pins: 1 RO, 2 RE, 3 DE, 4 DI, 5 GND, 6 A, 7 B, 8 VCC

## SKY13414-485LF
designator U?
IC RF SWITCH SP4T 3GHZ 14QFN; Manufacturer: Skyworks Solutions; Manufacturer Part Number: SKY13414-485LF; P1dB: 37dBm; Impedance: 50R; IIP3: 70dBm; Insertion Loss: 0.4dB; Test Frequency: 1GHz; Supplier: Digikey; Supplier Part Number: 863-1582-1-ND; RoHS: Yes; Category: RF Semiconductors and Devices; Stock: 104074; Pricing: 1=1.36, 10=1.219, 25=1.1568, 100=0.9501, 250=0.88816, 500=0.78488, 1000=0.61964 (USD); Case/Package: QFN; Min Operating Temperature: -40°C; Max Operating Temperature: 85°C; Packaging: Tape and Reel; Package Quantity: 3000; Throw Configuration: SP4T; Series: -; RoHS Compliant: Yes; ComponentLink1URL: https://datasheet.ciiva.com/15309/sky13414-485lf-201689g-231640-15309794.pdf?src-supplier=Mouser; ComponentLink1Description: https://datasheet.ciiva.com/15309/sky13414-485lf-201689g-231640-15309794.pdf?src-supplier=Mouser; Item Type: IC
footprint 14-QFN (2x2)
pins: 1 N/C, 2 RF3, 3 RF1, 4 VDD, 5 V3, 6 V2, 7 V1, 8 N/C, 9 RF2, 10 RF4, 11 N/C, 12 N/C, 13 ANT, 14 N/C, 15 EP

## SKY13489-001
designator U?
IC RF SWITCH SPDT 2.7GHZ 6WLCSP; Manufacturer: Skyworks Solutions; Manufacturer Part Number: SKY13489-001; P1dB: 39dBm; Insertion Loss: 0.2dB; Supplier: Digikey; Supplier Part Number: 863-1809-1-ND; RoHS: Yes; Category: RF Semiconductors and Devices; Stock: 3063; Pricing: 1=1.17, 10=1.049, 25=0.9956, 100=0.8177, 250=0.76436, 500=0.67548, 1000=0.53328, 2500=0.49773 (USD); Packaging: Cut Tape; Throw Configuration: SPDT; Series: -; Test Frequency: 2.7GHz; RoHS Compliant: Yes; ComponentLink1URL: http://www.skyworksinc.com/uploads/documents/SKY13489_001_202857C.pdf?src-supplier=Digikey; ComponentLink1Description: http://www.skyworksinc.com/uploads/documents/SKY13489_001_202857C.pdf?src-supplier=Digikey; ComponentLink2URL: https://www.skyworksinc.com/-/media/SkyWorks/Documents/Products/2201-2300/SKY13489_001_202857D.pdf?src-supplier=Digikey; ComponentLink2Description: https://www.skyworksinc.com/-/media/SkyWorks/Documents/Products/2201-2300/SKY13489_001_202857D.pdf?src-supplier=Digikey; LCSC Part Number: C429943; Item Type: IC
footprint WLCSP-6(0.7x1.1)
pins: A1 RF1, A2 ANT, A3 RF2, B1 V1, B2 GND, B3 VDD

## SLM6600
designator U?
4V~6V Polymer 1 3.5A SOP-8-EP Battery Management ICs ROHS; Manufacturer: SOLA-IC; Manufacturer Part Number: SLM6600; Item type: IC; Package: SOP-8-EP; LCSC Part Number: C130316; ComponentLink1Description: LCSC; ComponentLink1URL: https://www.lcsc.com/product-detail/Battery-Management-ICs_SOLA-IC-SLM6600_C130316.html
footprint 8-SO-EP_
pins: 1 VCC, 2 PROG, 3 NSTDBY, 4 NCHRG, 5 TS, 6 BAT, 7 GND, 8 LX, 9 EP

## SM7035P
designator U?
SOP-8 AC-DC Controllers & Regulators ROHS; Manufacturer: Shenzhen Sunmoon Micro; Manufacturer Part Number: SM7035P; Item Type: IC; Package: SOP-8; LCSC Part Number: C136191; ComponentLink1Description: LCSC; ComponentLink1URL: https://www.lcsc.com/product-detail/AC-DC-Controllers-Regulators_Shenzhen-Sunmoon-Micro-SM7035P_C136191.html
footprint SOP-8
pins: 1 DRAIN, 2 NC, 3 FB, 4 VDD, 5 NC, 6 NC, 7 GND, 8 GND

## SN65HVDA1040AQDRQ1
designator U?
IC TRANSCEIVER HALF 1/1 8SOIC; Manufacturer: Texas Instruments; Manufacturer Part Number: SN65HVDA1040AQDRQ1; Supplier: Mouser; LCSC Part Number: C188675; RoHS: Yes; Item Type: IC; Stock: 5009; Pricing: 1=2.2, 10=1.87, 50=1.87, 100=1.59, 1000=1.08, 10000=0.971 (USD); ComponentLink1URL: https://datasheet.ciiva.com/28652/1787993-28652354.pdf?src-supplier=Element14; ComponentLink1Description: https://datasheet.ciiva.com/28652/1787993-28652354.pdf?src-supplier=Element14; ComponentLink2URL: https://datasheet.ciiva.com/41461/001187135-da-01-en-ic-transcv-sn65hvda1040aqdrq1-soic-8-tid-41461891.pdf?src-supplier=Conrad; ComponentLink2Description: https://datasheet.ciiva.com/41461/001187135-da-01-en-ic-transcv-sn65hvda1040aqdrq1-soic-8-tid-41461891.pdf?src-supplier=Conrad; ComponentLink3URL: https://datasheet.ciiva.com/15150/getdatasheetpartid-184324-15150727.pdf?src-supplier=Verical; ComponentLink3Description: https://datasheet.ciiva.com/15150/getdatasheetpartid-184324-15150727.pdf?src-supplier=Verical; ComponentLink4URL: https://datasheet.ciiva.com/1766/sn65hvda1040a-q1-1766438.pdf?src-supplier=Digikey; ComponentLink4Description: https://datasheet.ciiva.com/1766/sn65hvda1040a-q1-1766438.pdf?src-supplier=Digikey; ComponentLink5URL: https://datasheet.ciiva.com/1766/sn65hvda1040a-q1-1766439.pdf?src-supplier=Digikey; ComponentLink5Description: https://datasheet.ciiva.com/1766/sn65hvda1040a-q1-1766439.pdf?src-supplier=Digikey; ComponentLink6URL: https://datasheet.ciiva.com/1766/sn65hvda1040a-q1-1766440.pdf?src-supplier=Digikey; ComponentLink6Description: https://datasheet.ciiva.com/1766/sn65hvda1040a-q1-1766440.pdf?src-supplier=Digikey
footprint SOIC-8(0.154", 3.90mm Width)
pins: 1 TXD, 2 GND, 3 VCC, 4 RXD, 5 SPLIT, 6 CANL, 7 CANH, 8 STB

## SN74AHC1G14DBVR
designator U?
IC INVERTER 1CH 1-INP SOT23-5; Manufacturer: Texas Instruments; Manufacturer Part Number: SN74AHC1G14DBVR; Number of Elements: 1; Max Supply Voltage: 5.5V; Min Supply Voltage: 2V; Propagation Delay: 10.6ns; Logic Function: Inverter,Schmitt Trigger; Low Level Output Current: 8mA; Quiescent Current: 1uA; High Level Output Current: -8mA; Turn-On Delay Time: 18.5ns; Input Type: SCHMITT TRIGGER; Supplier: Mouser; LCSC Part Number: C7469; RoHS: Yes; Item Type: IC; Stock: 69702; Pricing: 1=0.1, 10=0.062, 50=0.054, 100=0.046, 1000=0.037, 10000=0.031 (USD); Mounting Technology: Surface Mount; Case/Package: SOT-23; Pins: 5; Weight: 0.000557oz; Min Operating Temperature: -40°C; Max Operating Temperature: 125°C; Packaging: Tape and Reel; Number of Inputs: 1; Number of Gates: 1; Number of Circuits: 1; Number of Bits: 1; Series: 74AHC; Technology: CMOS; Max Output current: 8mA; Output Current: 8mA; Termination: SMD/SMT; Radiation Hardening: No; Lead Free: Lead Free; RoHS Compliant: Yes; Reach SVHC Compliant: No; ComponentLink1URL: https://datasheet.ciiva.com/4219/814sn74ahc1g14-4219764.pdf?src-supplier=Arrow+Electronics; ComponentLink1Description: https://datasheet.ciiva.com/4219/814sn74ahc1g14-4219764.pdf?src-supplier=Arrow+Electronics; ComponentLink2URL: https://datasheet.ciiva.com/15089/getdatasheetpartid-190002-15089353.pdf?src-supplier=Verical; ComponentLink2Description: https://datasheet.ciiva.com/15089/getdatasheetpartid-190002-15089353.pdf?src-supplier=Verical; ComponentLink3URL: https://datasheet.ciiva.com/7783/sn74ahc1g14-7783206.pdf?src-supplier=Element14; ComponentLink3Description: https://datasheet.ciiva.com/7783/sn74ahc1g14-7783206.pdf?src-supplier=Element14; ComponentLink4URL: https://datasheet.ciiva.com/7783/sn74ahc1g14-7783205.pdf?src-supplier=Element14; ComponentLink4Description: https://datasheet.ciiva.com/7783/sn74ahc1g14-7783205.pdf?src-supplier=Element14; ComponentLink5URL: https://datasheet.ciiva.com/46384/1882896-46384391.pdf?src-supplier=Element14; ComponentLink5Description: https://datasheet.ciiva.com/46384/1882896-46384391.pdf?src-supplier=Element14; ComponentLink6URL: https://datasheet.ciiva.com/1864/sn74ahc1g14-1864204.pdf?src-supplier=Digikey; ComponentLink6Description: https://datasheet.ciiva.com/1864/sn74ahc1g14-1864204.pdf?src-supplier=Digikey; ComponentLink7URL: https://datasheet.ciiva.com/1864/sn74ahc1g14-1864203.pdf?src-supplier=Digikey; ComponentLink7Description: https://datasheet.ciiva.com/1864/sn74ahc1g14-1864203.pdf?src-supplier=Digikey; ComponentLink8URL: https://datasheet.ciiva.com/1864/sn74ahc1g14-1864205.pdf?src-supplier=Digikey; ComponentLink8Description: https://datasheet.ciiva.com/1864/sn74ahc1g14-1864205.pdf?src-supplier=Digikey; ComponentLink9URL: https://datasheet.ciiva.com/48703/001074495-da-01-en-ic-schmitt-sn74ahc1g14dbvr-sot-23-5-tid-48703787.pdf?src-supplier=Conrad; ComponentLink9Description: https://datasheet.ciiva.com/48703/001074495-da-01-en-ic-schmitt-sn74ahc1g14dbvr-sot-23-5-tid-48703787.pdf?src-supplier=Conrad
footprint SOT-23-5
pins: 1 NC, 2 A, 3 GND, 4 Y, 5 VCC

## SN74AHCT125DR
designator U?
IC BUF NON-INVERT 5.5V 14SOIC; Manufacturer: Texas Instruments; Manufacturer Part Number: SN74AHCT125DR; Supplier: Mouser; LCSC Part Number: C155176; RoHS: Yes; Item Type: IC; Stock: 12107; Pricing: 1=0.27, 10=0.157, 50=0.157, 100=0.113, 1000=0.105, 10000=0.09 (USD); ComponentLink1URL: https://datasheet.ciiva.com/1833/sn74ahct125-1833856.pdf?src-supplier=Digikey; ComponentLink1Description: https://datasheet.ciiva.com/1833/sn74ahct125-1833856.pdf?src-supplier=Digikey; ComponentLink2URL: https://datasheet.ciiva.com/41456/001016252-da-01-en-ic-bus-bufer-q-sn74ahct125dr-soic-14-tid-41456647.pdf?src-supplier=Conrad; ComponentLink2Description: https://datasheet.ciiva.com/41456/001016252-da-01-en-ic-bus-bufer-q-sn74ahct125dr-soic-14-tid-41456647.pdf?src-supplier=Conrad; ComponentLink3URL: https://datasheet.ciiva.com/1833/sn74ahct125-1833857.pdf?src-supplier=Digikey; ComponentLink3Description: https://datasheet.ciiva.com/1833/sn74ahct125-1833857.pdf?src-supplier=Digikey; ComponentLink4URL: https://datasheet.ciiva.com/1833/sn74ahct125-1833858.pdf?src-supplier=Digikey; ComponentLink4Description: https://datasheet.ciiva.com/1833/sn74ahct125-1833858.pdf?src-supplier=Digikey; ComponentLink5URL: https://datasheet.ciiva.com/14303/sn74ahct125-14303436.pdf?src-supplier=Avnet; ComponentLink5Description: https://datasheet.ciiva.com/14303/sn74ahct125-14303436.pdf?src-supplier=Avnet; ComponentLink6URL: https://datasheet.ciiva.com/46415/1839066-46415271.pdf?src-supplier=Element14; ComponentLink6Description: https://datasheet.ciiva.com/46415/1839066-46415271.pdf?src-supplier=Element14
footprint SOIC-14
pins: 1 1OE#, 2 1A, 3 1Y, 4 2OE#, 5 2A, 6 2Y, 7 GND, 8 3Y, 9 3A, 10 3OE#, 11 4Y, 12 4A, 13 4OE#, 14 VCC

## SN74HC14QDRQ1
designator U?
IC INVERT SCHMITT 6CH 1IN 14SOIC; Manufacturer: Texas Instruments; Manufacturer Part Number: SN74HC14QDRQ1; Max Supply Voltage: 6V; Min Supply Voltage: 2V; Operating Supply Voltage: 5V; Propagation Delay: 21ns; Logic Function: Buffer,Inverter,Schmitt Trigger; Number of Elements: 6; Output Current: 25mA; Low Level Output Current: 5.2mA; Quiescent Current: 2uA; High Level Output Current: -5.2mA; Schmitt Trigger Input: Yes; Input Type: SCHMITT TRIGGER; Supplier: Mouser; Supplier Part Number: 595-SN74HC14QDRQ1; RoHS: Yes; Category: Logic Gates; Stock: 6966; Pricing: 1=0.68, 10=0.601, 50=0.601, 100=0.503, 1000=0.392, 10000=0.3 (USD); Mounting Technology: Surface Mount; Case/Package: SOIC; Pins: 14; Weight: 0.004318oz; Min Operating Temperature: -40°C; Max Operating Temperature: 125°C; Packaging: Tape and Reel; Package Quantity: 1; Number of Inputs: 6; Number of Circuits: 6; Turn-On Delay Time: 21ns; Number of Gates: 6; Number of Bits: 6; Series: 74HC; Technology: CMOS; Length: 8.65mm; Width: 3.91mm; Height: 1.58mm; Radiation Hardening: No; Reach SVHC Compliant: No; Lead Free: Lead Free; RoHS Compliant: Yes; ComponentLink1URL: https://datasheet.ciiva.com/15089/getdatasheetpartid-126971-15089251.pdf?src-supplier=Verical; ComponentLink1Description: https://datasheet.ciiva.com/15089/getdatasheetpartid-126971-15089251.pdf?src-supplier=Verical; ComponentLink2URL: https://datasheet.ciiva.com/1864/sn74hc14-q1-1864939.pdf?src-supplier=Digikey; ComponentLink2Description: https://datasheet.ciiva.com/1864/sn74hc14-q1-1864939.pdf?src-supplier=Digikey; ComponentLink3URL: https://datasheet.ciiva.com/1864/sn74hc14-q1-1864938.pdf?src-supplier=Digikey; ComponentLink3Description: https://datasheet.ciiva.com/1864/sn74hc14-q1-1864938.pdf?src-supplier=Digikey; ComponentLink4URL: https://datasheet.ciiva.com/1864/sn74hc14-q1-1864940.pdf?src-supplier=Digikey; ComponentLink4Description: https://datasheet.ciiva.com/1864/sn74hc14-q1-1864940.pdf?src-supplier=Digikey; ComponentLink5URL: https://datasheet.ciiva.com/14288/sn74hc14-q1-14288654.pdf?src-supplier=Avnet; ComponentLink5Description: https://datasheet.ciiva.com/14288/sn74hc14-q1-14288654.pdf?src-supplier=Avnet; ComponentLink6URL: https://datasheet.ciiva.com/48703/001073384-da-01-en-ic-hex-schmitt-sn74hc14qdrq1-soic-14-tid-48703180.pdf?src-supplier=Conrad; ComponentLink6Description: https://datasheet.ciiva.com/48703/001073384-da-01-en-ic-hex-schmitt-sn74hc14qdrq1-soic-14-tid-48703180.pdf?src-supplier=Conrad; LCSC Part Number: C507235; Item Type: IC
footprint SOIC-14
pins: 1 1A, 2 1Y, 3 2A, 4 2Y, 5 3A, 6 3Y, 7 GND, 8 4Y, 9 4A, 10 5Y, 11 5A, 12 6Y, 13 6A, 14 VCC

## SN74LS595DR
designator U?
IC 8BIT SHFT REG OUT LTCH 16SOIC; Manufacturer: Texas Instruments; Manufacturer Part Number: SN74LS595DR; Supplier: Mouser; Supplier Part Number: 595-SN74LS595DR; RoHS: Yes; Item Type: IC; Stock: 2196; Pricing: 1=11.61, 10=10.48, 50=10, 100=8.68, 1000=6.58, 10000=6.34 (USD); ComponentLink1URL: https://datasheet.ciiva.com/14296/sn74ls595-14296811.pdf?src-supplier=Avnet; ComponentLink1Description: https://datasheet.ciiva.com/14296/sn74ls595-14296811.pdf?src-supplier=Avnet; ComponentLink2URL: https://datasheet.ciiva.com/1886/sn74ls595-1886573.pdf?src-supplier=Digikey; ComponentLink2Description: https://datasheet.ciiva.com/1886/sn74ls595-1886573.pdf?src-supplier=Digikey; ComponentLink3URL: https://datasheet.ciiva.com/1886/sn74ls595-1886574.pdf?src-supplier=Digikey; ComponentLink3Description: https://datasheet.ciiva.com/1886/sn74ls595-1886574.pdf?src-supplier=Digikey; ComponentLink4URL: https://datasheet.ciiva.com/1886/sn74ls595-1886575.pdf?src-supplier=Digikey; ComponentLink4Description: https://datasheet.ciiva.com/1886/sn74ls595-1886575.pdf?src-supplier=Digikey
footprint 16-SOIC (0.154", 3.90mm Width)
pins: 1 QB, 2 QC, 3 QD, 4 QE, 5 QF, 6 QG, 7 QH, 8 GND, 9 ~{QH}, 10 ~{SRCLR}, 11 SRCK, 12 RCK, 13 ~{G}, 14 SER, 15 QA, 16 VCC

## SN74LV1T34DBVR
designator U?
IC BUF NON-INVERT 5.5V SOT23-5; Manufacturer: Texas Instruments; Manufacturer Part Number: SN74LV1T34DBVR; Number of Elements: 1; Logic Function: Buffer,Inverting; High Level Output Current: -8mA; Low Level Output Current: 8mA; Min Supply Voltage: 1.6V; Polarity: Non-Inverting; Propagation Delay: 15.5ns; Quiescent Current: 1uA; Supplier 1: Digi-Key; Stock 1: 37360; Pricing 1: 1=0.43, 10=0.349, 25=0.3192, 100=0.2374, 250=0.2152, 500=0.17808, 1000=0.13356 (USD); Mount: Surface Mount; Case/Package: SOT-23-5; Number of Pins: 5; Weight: 0.000353oz; Min Operating Temperature: -40°C; Max Operating Temperature: 125°C; Packaging: Tape and Reel; Number of Bits per Element: 1; Number of Bits: 1; Package Quantity: 3000; Max Supply Voltage: 5.5V; Number of Input Lines: 1; Number of Output Lines: 1; Operating Supply Current: 8mA; Number of Channels: 1; Number of Inputs: 1; Number of Outputs: 1; Radiation Hardening: No; RoHS Compliant: Yes; REACH SVHC: No SVHC; Lead Free: Lead Free; ComponentLink1URL: http://www.ti.com/lit/pdf/sdyu001?src-supplier=Digi-Key; ComponentLink1Description: http://www.ti.com/lit/pdf/sdyu001?src-supplier=Digi-Key; ComponentLink2URL: http://www.ti.com/lit/ds/symlink/sn74lv1t34.pdf?src-supplier=Avnet; ComponentLink2Description: http://www.ti.com/lit/ds/symlink/sn74lv1t34.pdf?src-supplier=Avnet; Supplier Part Number 1: 296-37176-6-ND; LCSC Part Number: C100024; Item Type: IC
footprint SOT-23-5
pins: 1 NC, 2 INPUT A, 3 GND, 4 OUTPUT Y, 5 VCC

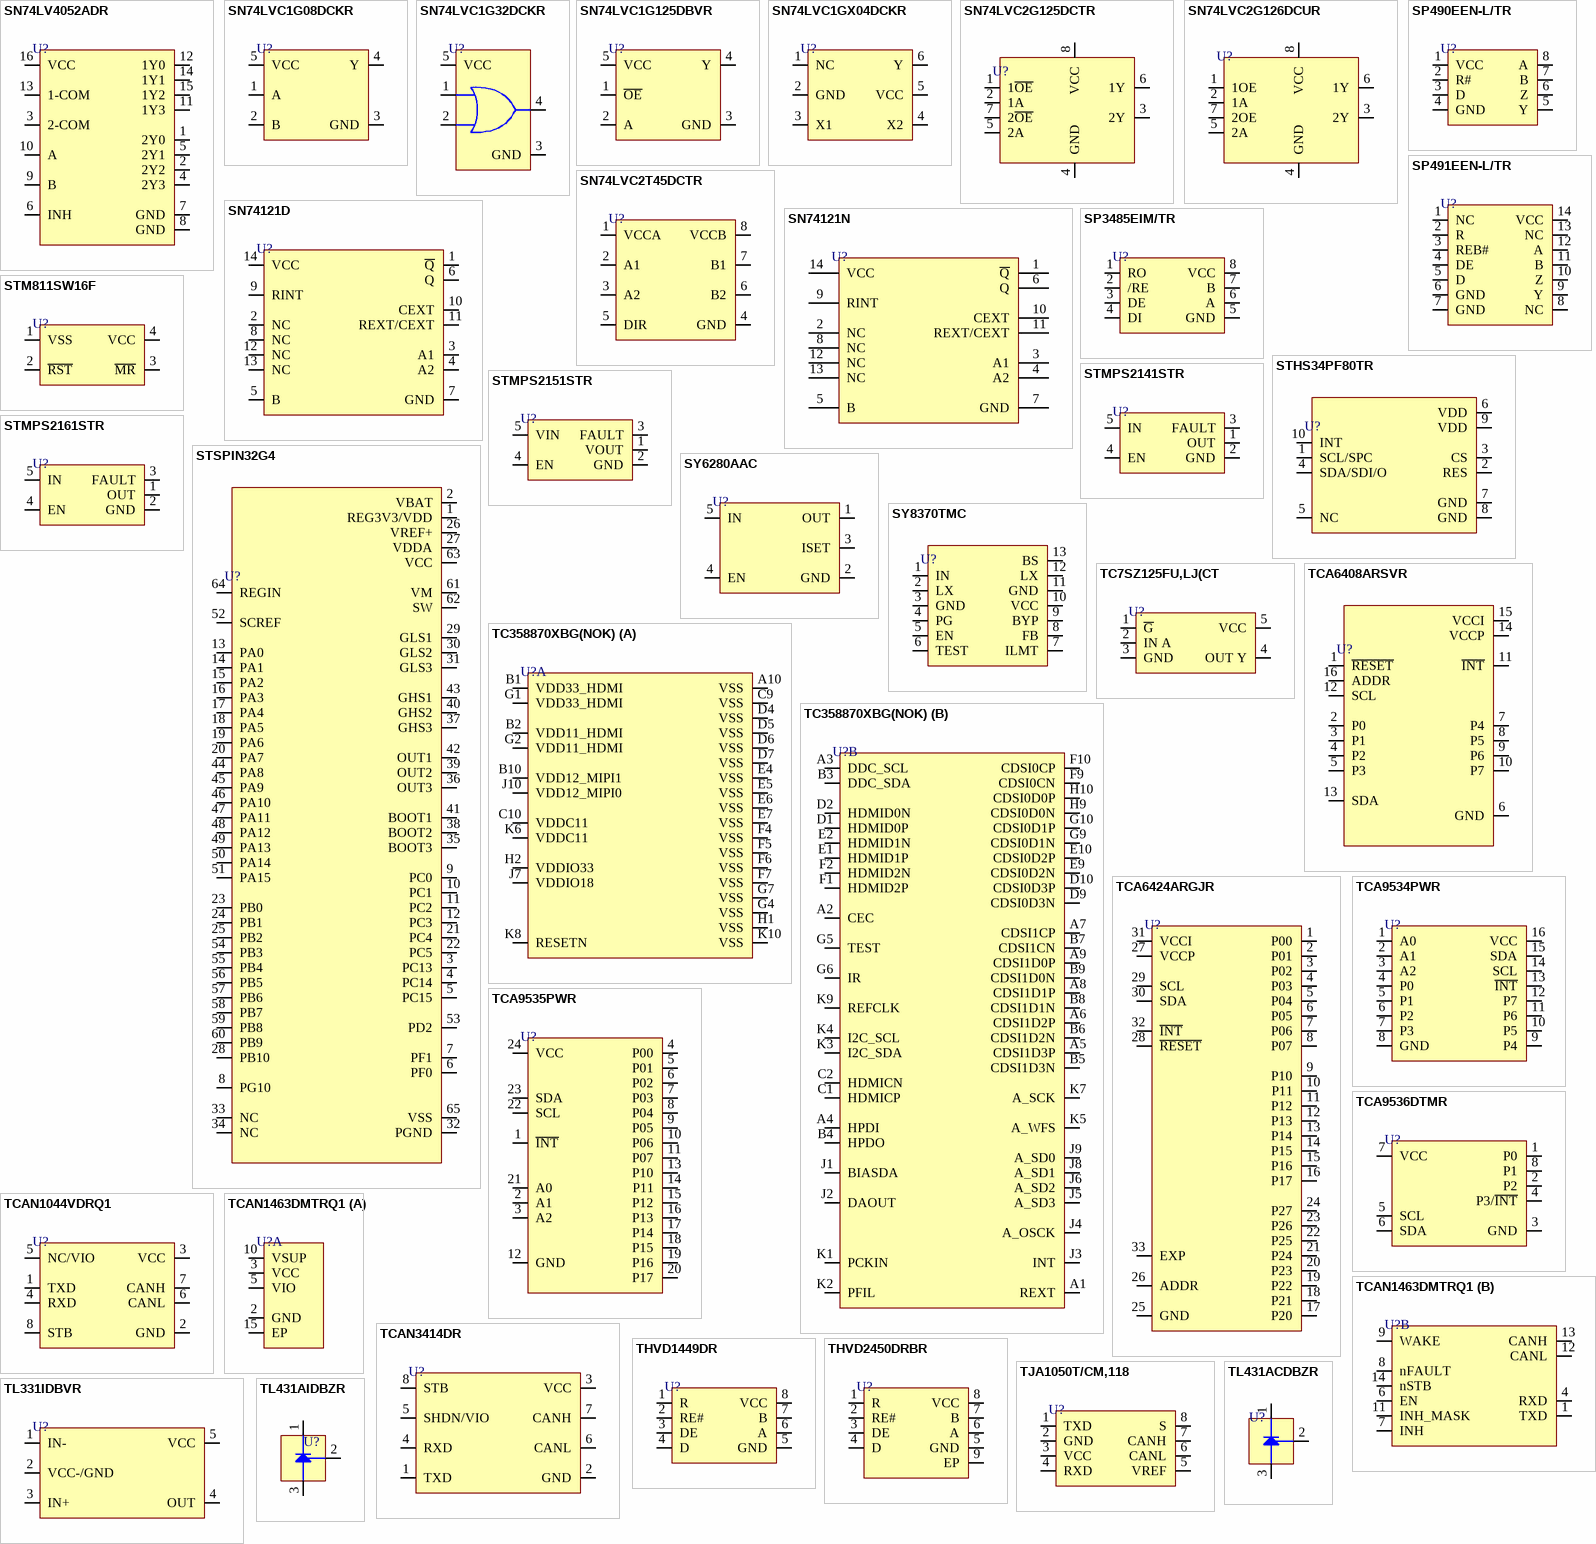
[diagram p18: symbols SN74LV4052ADR to TL431AIDBZR]

## SN74LV4052ADR
designator U?
IC SWITCH SP4T X 2 75OHM 16SOIC; Manufacturer: Texas Instruments; Manufacturer Part Number: SN74LV4052ADR; Drain to Source Resistance: 100R; Supplier: Mouser; LCSC Part Number: C273641; RoHS: Yes; Item Type: IC; Stock: 6081; Pricing: 1=0.39, 10=0.319, 50=0.319, 100=0.237, 1000=0.163, 10000=0.131 (USD); Length: 9.9mm; Width: 3.91mm; Height: 1.75mm; Thickness: 1.58mm; ComponentLink1URL: https://datasheet.ciiva.com/15127/getdatasheetpartid-296403-15127637.pdf?src-supplier=Verical; ComponentLink1Description: https://datasheet.ciiva.com/15127/getdatasheetpartid-296403-15127637.pdf?src-supplier=Verical; ComponentLink2URL: https://datasheet.ciiva.com/1669/sn74lv4052a-1669728.pdf?src-supplier=Digikey; ComponentLink2Description: https://datasheet.ciiva.com/1669/sn74lv4052a-1669728.pdf?src-supplier=Digikey; ComponentLink3URL: https://datasheet.ciiva.com/46435/1845014-46435855.pdf?src-supplier=Element14; ComponentLink3Description: https://datasheet.ciiva.com/46435/1845014-46435855.pdf?src-supplier=Element14; ComponentLink4URL: https://datasheet.ciiva.com/14306/sn74lv4052a-14306682.pdf?src-supplier=Avnet; ComponentLink4Description: https://datasheet.ciiva.com/14306/sn74lv4052a-14306682.pdf?src-supplier=Avnet; ComponentLink5URL: https://datasheet.ciiva.com/1669/sn74lv4052a-1669727.pdf?src-supplier=Digikey; ComponentLink5Description: https://datasheet.ciiva.com/1669/sn74lv4052a-1669727.pdf?src-supplier=Digikey; ComponentLink6URL: https://datasheet.ciiva.com/1669/sn74lv4052a-1669729.pdf?src-supplier=Digikey; ComponentLink6Description: https://datasheet.ciiva.com/1669/sn74lv4052a-1669729.pdf?src-supplier=Digikey; ComponentLink7URL: https://datasheet.ciiva.com/48711/001048022-da-01-en-ic-mp-sn74lv40-sn74lv4052adr-soic-16-tid-48711974.pdf?src-supplier=Conrad; ComponentLink7Description: https://datasheet.ciiva.com/48711/001048022-da-01-en-ic-mp-sn74lv40-sn74lv4052adr-soic-16-tid-48711974.pdf?src-supplier=Conrad
footprint SOIC-16
pins: 1 2Y0, 2 2Y2, 3 2-COM, 4 2Y3, 5 2Y1, 6 INH, 7 GND, 8 GND, 9 B, 10 A, 11 1Y3, 12 1Y0, 13 1-COM, 14 1Y1, 15 1Y2, 16 VCC

## SN74LVC1G08DCKR
designator U?
IC GATE AND 1CH 2-INP SC70-5; Manufacturer: Texas Instruments; Manufacturer Part Number: SN74LVC1G08DCKR; Item Type: Logic Gates; Propagation Delay: 4ns; Number of Gates: 1; Logic Function: AND GATE; Min Supply Voltage: 1.65V; Max Supply Voltage: 5.5V; Output Current: 32mA; Number of Inputs: 2; Quiescent Current: 10uA; High Level Output Current: -32mA; Turn-On Delay Time: 4.5ns; Number of Channels: 1NUMBER; Schmitt Trigger Input: No; Supplier 1: Mouser; RoHS: Yes; Stock 1: 509262; Pricing 1: 1=0.33, 10=0.228, 50=0.228, 100=0.095, 1000=0.065, 10000=0.035 (USD); Mount: Surface Mount; Case/Package: SC; Number of Pins: 5; Weight: 8.8E-05oz; Min Operating Temperature: -40°C; Max Operating Temperature: 125°C; Packaging: Tape and Reel; Number of Bits: 1; Number of Outputs: 1; Number of Input Lines: 2; Number of Output Lines: 1; Low Level Output Current: 32mA; Number of Circuits: 1; Number of Elements: 1; Series: 74LVC; Technology: CMOS; Max Output Current: 32mA; Termination: SMD/SMT; Length: 2.15mm; Width: 1.4mm; Height: 1mm; Thickness: 900um; Radiation Hardening: No; Reach SVHC Compliant: No; Lead Free: Lead Free; RoHS Compliant: Yes; ComponentLink1URL: https://datasheet.ciiva.com/14290/sn74lvc1g08-14290720.pdf?src-supplier=Avnet; ComponentLink1Description: https://datasheet.ciiva.com/14290/sn74lvc1g08-14290720.pdf?src-supplier=Avnet; ComponentLink2URL: https://datasheet.ciiva.com/28540/1772545-28540798.pdf?src-supplier=Element14; ComponentLink2Description: https://datasheet.ciiva.com/28540/1772545-28540798.pdf?src-supplier=Element14; ComponentLink3URL: https://datasheet.ciiva.com/1864/sn74lvc1g08-1864342.pdf?src-supplier=Digikey; ComponentLink3Description: https://datasheet.ciiva.com/1864/sn74lvc1g08-1864342.pdf?src-supplier=Digikey; ComponentLink4URL: https://datasheet.ciiva.com/1864/sn74lvc1g08-1864341.pdf?src-supplier=Digikey; ComponentLink4Description: https://datasheet.ciiva.com/1864/sn74lvc1g08-1864341.pdf?src-supplier=Digikey; ComponentLink5URL: https://datasheet.ciiva.com/1864/sn74lvc1g08-1864343.pdf?src-supplier=Digikey; ComponentLink5Description: https://datasheet.ciiva.com/1864/sn74lvc1g08-1864343.pdf?src-supplier=Digikey; ComponentLink6URL: https://datasheet.ciiva.com/14290/sn74lvc1g08-14290717.pdf?src-supplier=Avnet; ComponentLink6Description: https://datasheet.ciiva.com/14290/sn74lvc1g08-14290717.pdf?src-supplier=Avnet; Supplier Part Number 1: 595-SN74LVC1G08DCKR; LCSC Part Number: C7832
footprint SC70-5
pins: 1 A, 2 B, 3 GND, 4 Y, 5 VCC